# Altium schematic symbol library Controllers-Memory-LIB-SCH.SchLib: 15 symbols
Pins are listed as number, name and electrical type; pins without a type are passive.

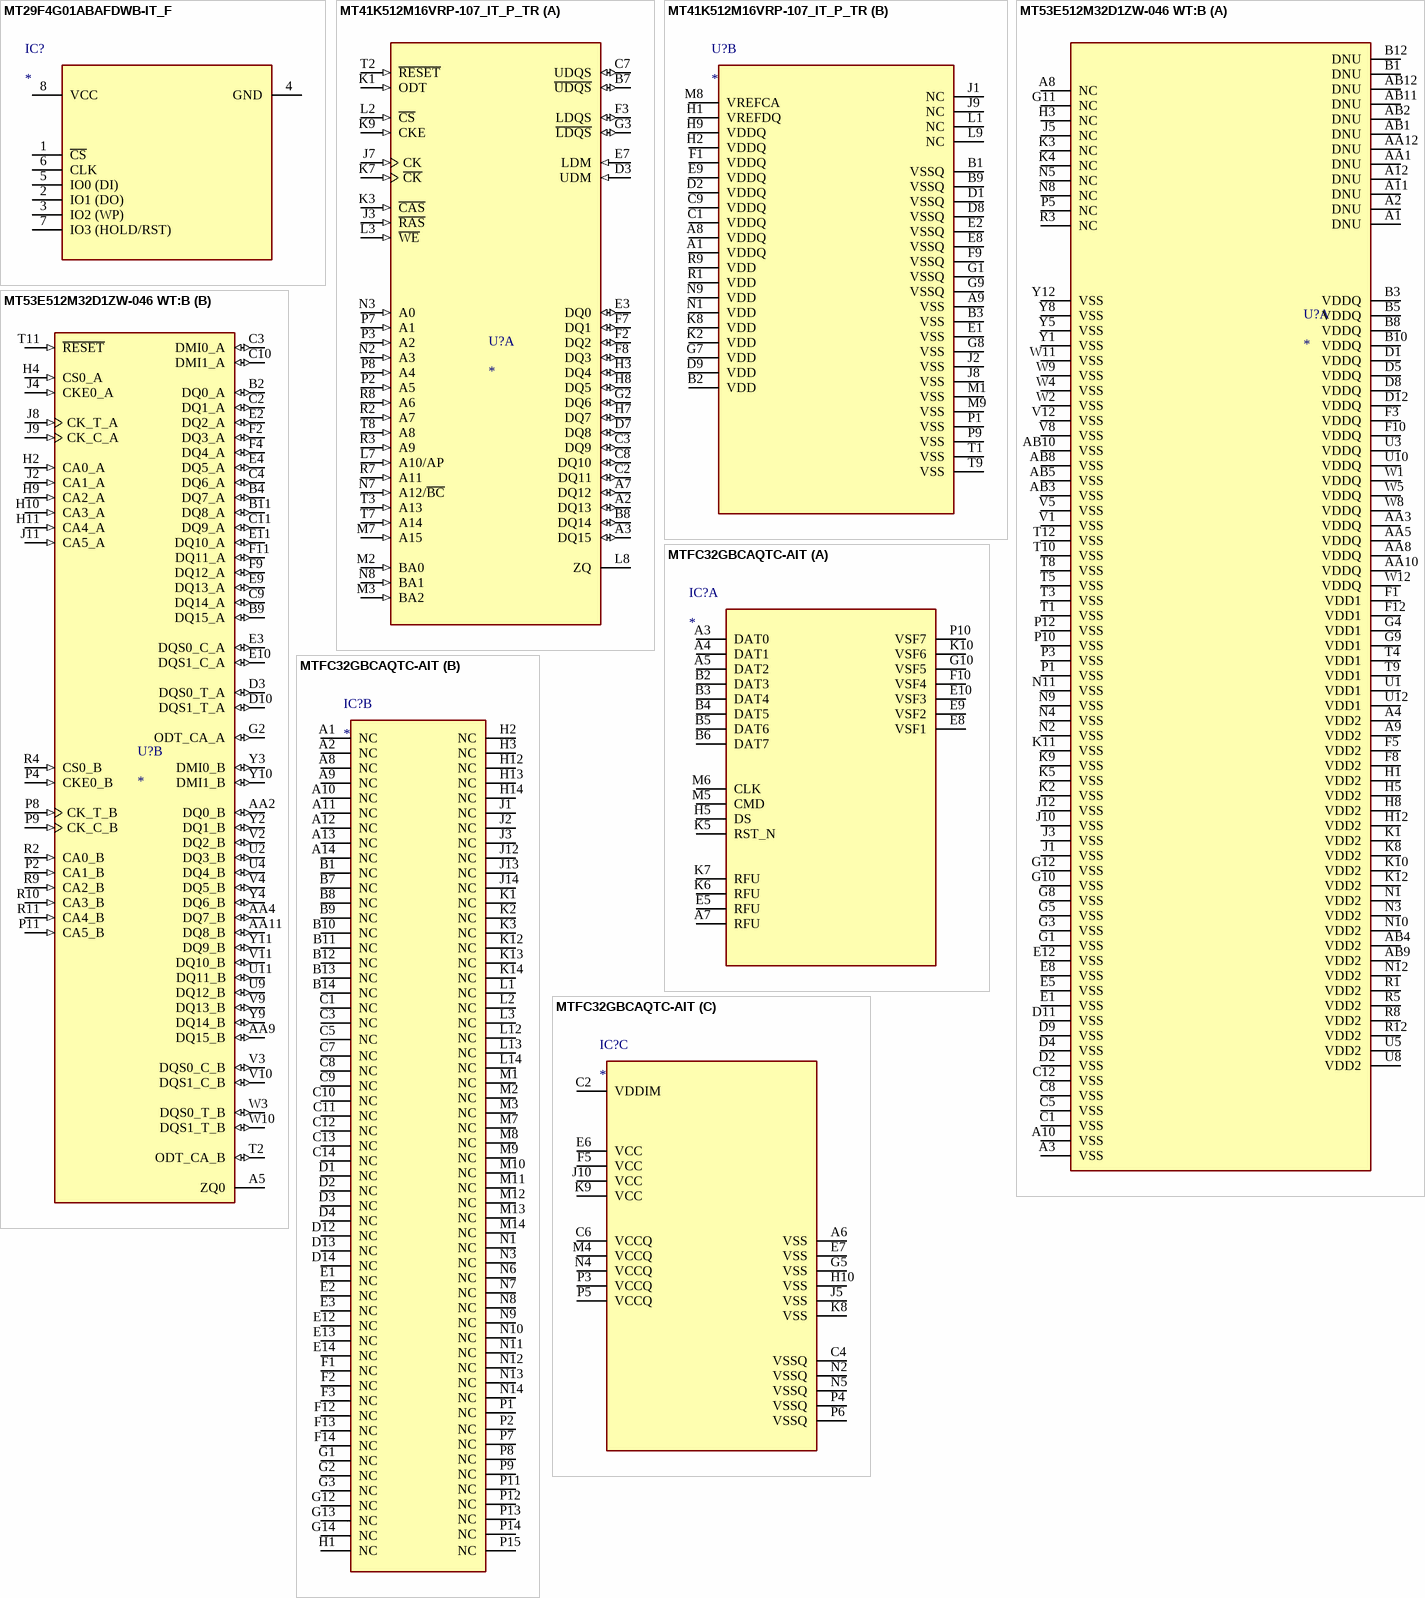
[diagram p0: symbols MT29F4G01ABAFDWB-IT_F to MTFC32GBCAQTC-AIT]

## MT29F4G01ABAFDWB-IT_F
designator IC?
Integrated Circuit; Manufacturer: Micron; Manufacturer Part Number: MT29F4G01ABAFDWB-IT:F; Population Status: YES; Datasheet Link: https://www.farnell.com/datasheets/3151403.pdf; Height: 0.65mm; Supplier Part Number: 340-359563
footprint SON127P800X600X65-8N
pins: 1 ~{CS}, 2 IO1 (DO), 3 IO2 (WP), 4 GND, 5 IO0 (DI), 6 CLK, 7 IO3 (HOLD/RST), 8 VCC

## MT41K512M16VRP-107_IT_P_TR
designator U?
SDRAM - DDR3L Memory IC 8Gbit Parallel 933 MHz 20 ns 96-FBGA (8x14); Manufacturer: Micron Technology; Manufacturer Part Number: MT41K512M16VRP-107 IT:P TR; Population Status: YES; Package: None
footprint BGA96C80P9X16_800X1400X120
part A pins: A2 DQ13 (io), A3 DQ15 (io), A7 DQ12 (io), B7 ~{UDQS} (io), B8 DQ14 (io), C2 DQ11 (io), C3 DQ9 (io), C7 UDQS (io), C8 DQ10 (io), D3 UDM (in), D7 DQ8 (io), E3 DQ0 (io), E7 LDM (in), F2 DQ2 (io), F3 LDQS (io), F7 DQ1 (io), F8 DQ3 (io), G2 DQ6 (io), G3 ~{LDQS} (io), H3 DQ4 (io), H7 DQ7 (io), H8 DQ5 (io), J3 ~{RAS} (in), J7 CK (in), K1 ODT (in), K3 ~{CAS} (in), K7 ~{CK} (in), K9 CKE (in), L2 ~{CS} (in), L3 ~{WE} (in), L7 A10/AP (in), L8 ZQ, M2 BA0 (in), M3 BA2 (in), M7 A15 (in), N2 A3 (in), N3 A0 (in), N7 A12/~{BC} (in), N8 BA1 (in), P2 A5 (in), P3 A2 (in), P7 A1 (in), P8 A4 (in), R2 A7 (in), R3 A9 (in), R7 A11 (in), R8 A6 (in), T2 ~{RESET} (in), T3 A13 (in), T7 A14 (in), T8 A8 (in)
part B pins: A1 VDDQ (power), A8 VDDQ (power), A9 VSS (power), B1 VSSQ (power), B2 VDD (power), B3 VSS (power), B9 VSSQ (power), C1 VDDQ (power), C9 VDDQ (power), D1 VSSQ (power), D2 VDDQ (power), D8 VSSQ (power), D9 VDD (power), E1 VSS (power), E2 VSSQ (power), E8 VSSQ (power), E9 VDDQ (power), F1 VDDQ (power), F9 VSSQ (power), G1 VSSQ (power), G7 VDD (power), G8 VSS (power), G9 VSSQ (power), H1 VREFDQ (power), H2 VDDQ (power), H9 VDDQ (power), J1 NC, J2 VSS (power), J8 VSS (power), J9 NC, K2 VDD (power), K8 VDD (power), L1 NC, L9 NC, M1 VSS (power), M8 VREFCA (power), M9 VSS (power), N1 VDD (power), N9 VDD (power), P1 VSS (power), P9 VSS (power), R1 VDD (power), R9 VDD (power), T1 VSS (power), T9 VSS (power)

## MT53E512M32D1ZW-046 WT:B
designator U?
SDRAM - Mobile LPDDR4 Memory IC 16Gbit Parallel 2.133 GHz 3.5 ns 200-TFBGA (10x14.5); Manufacturer: Micron Technology; Manufacturer Part Number: MT53E512M32D1ZW-046 IT:B; Population Status: YES; Package: None
footprint BGA200C65P12X22_1000X1450X105 (Footprint not found)
part A pins: A1 DNU, A2 DNU, A3 VSS (power), A4 VDD2 (power), A8 NC, A9 VDD2 (power), A10 VSS (power), A11 DNU, A12 DNU, AA1 DNU, AA3 VDDQ (power), AA5 VDDQ (power), AA8 VDDQ (power), AA10 VDDQ (power), AA12 DNU, AB1 DNU, AB2 DNU, AB3 VSS (power), AB4 VDD2 (power), AB5 VSS (power), AB8 VSS (power), AB9 VDD2 (power), AB10 VSS (power), AB11 DNU, AB12 DNU, B1 DNU, B3 VDDQ (power), B5 VDDQ (power), B8 VDDQ (power), B10 VDDQ (power), B12 DNU, C1 VSS (power), C5 VSS (power), C8 VSS (power), C12 VSS (power), D1 VDDQ (power), D2 VSS (power), D4 VSS (power), D5 VDDQ (power), D8 VDDQ (power), D9 VSS (power), D11 VSS (power), D12 VDDQ (power), E1 VSS (power), E5 VSS (power), E8 VSS (power), E12 VSS (power), F1 VDD1 (power), F3 VDDQ (power), F5 VDD2 (power), F8 VDD2 (power), F10 VDDQ (power), F12 VDD1 (power), G1 VSS (power), G3 VSS (power), G4 VDD1 (power), G5 VSS (power), G8 VSS (power), G9 VDD1 (power), G10 VSS (power), G11 NC, G12 VSS (power), H1 VDD2 (power), H3 NC, H5 VDD2 (power), H8 VDD2 (power), H12 VDD2 (power), J1 VSS (power), J3 VSS (power), J5 NC, J10 VSS (power), J12 VSS (power), K1 VDD2 (power), K2 VSS (power), K3 NC, K4 NC, K5 VSS (power), K8 VDD2 (power), K9 VSS (power), K10 VDD2 (power), K11 VSS (power), K12 VDD2 (power), N1 VDD2 (power), N2 VSS (power), N3 VDD2 (power), N4 VSS (power), N5 NC, N8 NC, N9 VSS (power), N10 VDD2 (power), N11 VSS (power), N12 VDD2 (power), P1 VSS (power), P3 VSS (power), P5 NC, P10 VSS (power), P12 VSS (power), R1 VDD2 (power), R3 NC, R5 VDD2 (power), R8 VDD2 (power), R12 VDD2 (power), T1 VSS (power), T3 VSS (power), T4 VDD1 (power), T5 VSS (power), T8 VSS (power), T9 VDD1 (power), T10 VSS (power), T12 VSS (power), U1 VDD1 (power), U3 VDDQ (power), U5 VDD2 (power), U8 VDD2 (power), U10 VDDQ (power), U12 VDD1 (power), V1 VSS (power), V5 VSS (power), V8 VSS (power), V12 VSS (power), W1 VDDQ (power), W2 VSS (power), W4 VSS (power), W5 VDDQ (power), W8 VDDQ (power), W9 VSS (power), W11 VSS (power), W12 VDDQ (power), Y1 VSS (power), Y5 VSS (power), Y8 VSS (power), Y12 VSS (power)
part B pins: A5 ZQ0, AA2 DQ0_B (io), AA4 DQ7_B (io), AA9 DQ15_B (io), AA11 DQ8_B (io), B2 DQ0_A (io), B4 DQ7_A (io), B9 DQ15_A (io), B11 DQ8_A (io), C2 DQ1_A (io), C3 DMI0_A (io), C4 DQ6_A (io), C9 DQ14_A (io), C10 DMI1_A (io), C11 DQ9_A (io), D3 DQS0_T_A (io), D10 DQS1_T_A (io), E2 DQ2_A (io), E3 DQS0_C_A (io), E4 DQ5_A (io), E9 DQ13_A (io), E10 DQS1_C_A (io), E11 DQ10_A (io), F2 DQ3_A (io), F4 DQ4_A (io), F9 DQ12_A (io), F11 DQ11_A (io), G2 ODT_CA_A (io), H2 CA0_A (in), H4 CS0_A (in), H9 CA2_A (in), H10 CA3_A (in), H11 CA4_A (in), J2 CA1_A (in), J4 CKE0_A (in), J8 CK_T_A (in), J9 CK_C_A (in), J11 CA5_A (in), P2 CA1_B (in), P4 CKE0_B (in), P8 CK_T_B (in), P9 CK_C_B (in), P11 CA5_B (in), R2 CA0_B (in), R4 CS0_B (in), R9 CA2_B (in), R10 CA3_B (in), R11 CA4_B (in), T2 ODT_CA_B (io), T11 ~{RESET} (in), U2 DQ3_B (io), U4 DQ4_B (io), U9 DQ12_B (io), U11 DQ11_B (io), V2 DQ2_B (io), V3 DQS0_C_B (io), V4 DQ5_B (io), V9 DQ13_B (io), V10 DQS1_C_B (io), V11 DQ10_B (io), W3 DQS0_T_B (io), W10 DQS1_T_B (io), Y2 DQ1_B (io), Y3 DMI0_B (io), Y4 DQ6_B (io), Y9 DQ14_B (io), Y10 DMI1_B (io), Y11 DQ9_B (io)

## MTFC32GBCAQTC-AIT
designator IC?
Integrated Circuit; Manufacturer: Micron; Manufacturer Part Number: MTFC32GAZAQHD-WT; Population Status: YES; Datasheet Link: https://4donline.ihs.com/images/VipMasterIC/IC/MICT/MICT-S-A0013760855/MICT-S-A0013760855-1.pdf?hkey=52A5661711E402568146F3353EA87419; Height: 0.9mm; Supplier Part Number: 340-531307-TRAY
footprint BGA153C50P14X14_1150X1300X90
part A pins: A3 DAT0, A4 DAT1, A5 DAT2, A7 RFU, B2 DAT3, B3 DAT4, B4 DAT5, B5 DAT6, B6 DAT7, E5 RFU, E8 VSF1, E9 VSF2, E10 VSF3, F10 VSF4, G10 VSF5, H5 DS, K5 RST_N, K6 RFU, K7 RFU, K10 VSF6, M5 CMD, M6 CLK, P10 VSF7
part B pins: A1 NC, A2 NC, A8 NC, A9 NC, A10 NC, A11 NC, A12 NC, A13 NC, A14 NC, B1 NC, B7 NC, B8 NC, B9 NC, B10 NC, B11 NC, B12 NC, B13 NC, B14 NC, C1 NC, C3 NC, C5 NC, C7 NC, C8 NC, C9 NC, C10 NC, C11 NC, C12 NC, C13 NC, C14 NC, D1 NC, D2 NC, D3 NC, D4 NC, D12 NC, D13 NC, D14 NC, E1 NC, E2 NC, E3 NC, E12 NC, E13 NC, E14 NC, F1 NC, F2 NC, F3 NC, F12 NC, F13 NC, F14 NC, G1 NC, G2 NC, G3 NC, G12 NC, G13 NC, G14 NC, H1 NC, H2 NC, H3 NC, H12 NC, H13 NC, H14 NC, J1 NC, J2 NC, J3 NC, J12 NC, J13 NC, J14 NC, K1 NC, K2 NC, K3 NC, K12 NC, K13 NC, K14 NC, L1 NC, L2 NC, L3 NC, L12 NC, L13 NC, L14 NC, M1 NC, M2 NC, M3 NC, M7 NC, M8 NC, M9 NC, M10 NC, M11 NC, M12 NC, M13 NC, M14 NC, N1 NC, N3 NC, N6 NC, N7 NC, N8 NC, N9 NC, N10 NC, N11 NC, N12 NC, N13 NC, N14 NC, P1 NC, P2 NC, P7 NC, P8 NC, P9 NC, P11 NC, P12 NC, P13 NC, P14 NC, P15 NC
part C pins: A6 VSS, C2 VDDIM, C4 VSSQ, C6 VCCQ, E6 VCC, E7 VSS, F5 VCC, G5 VSS, H10 VSS, J5 VSS, J10 VCC, K8 VSS, K9 VCC, M4 VCCQ, N2 VSSQ, N4 VCCQ, N5 VSSQ, P3 VCCQ, P4 VSSQ, P5 VCCQ, P6 VSSQ

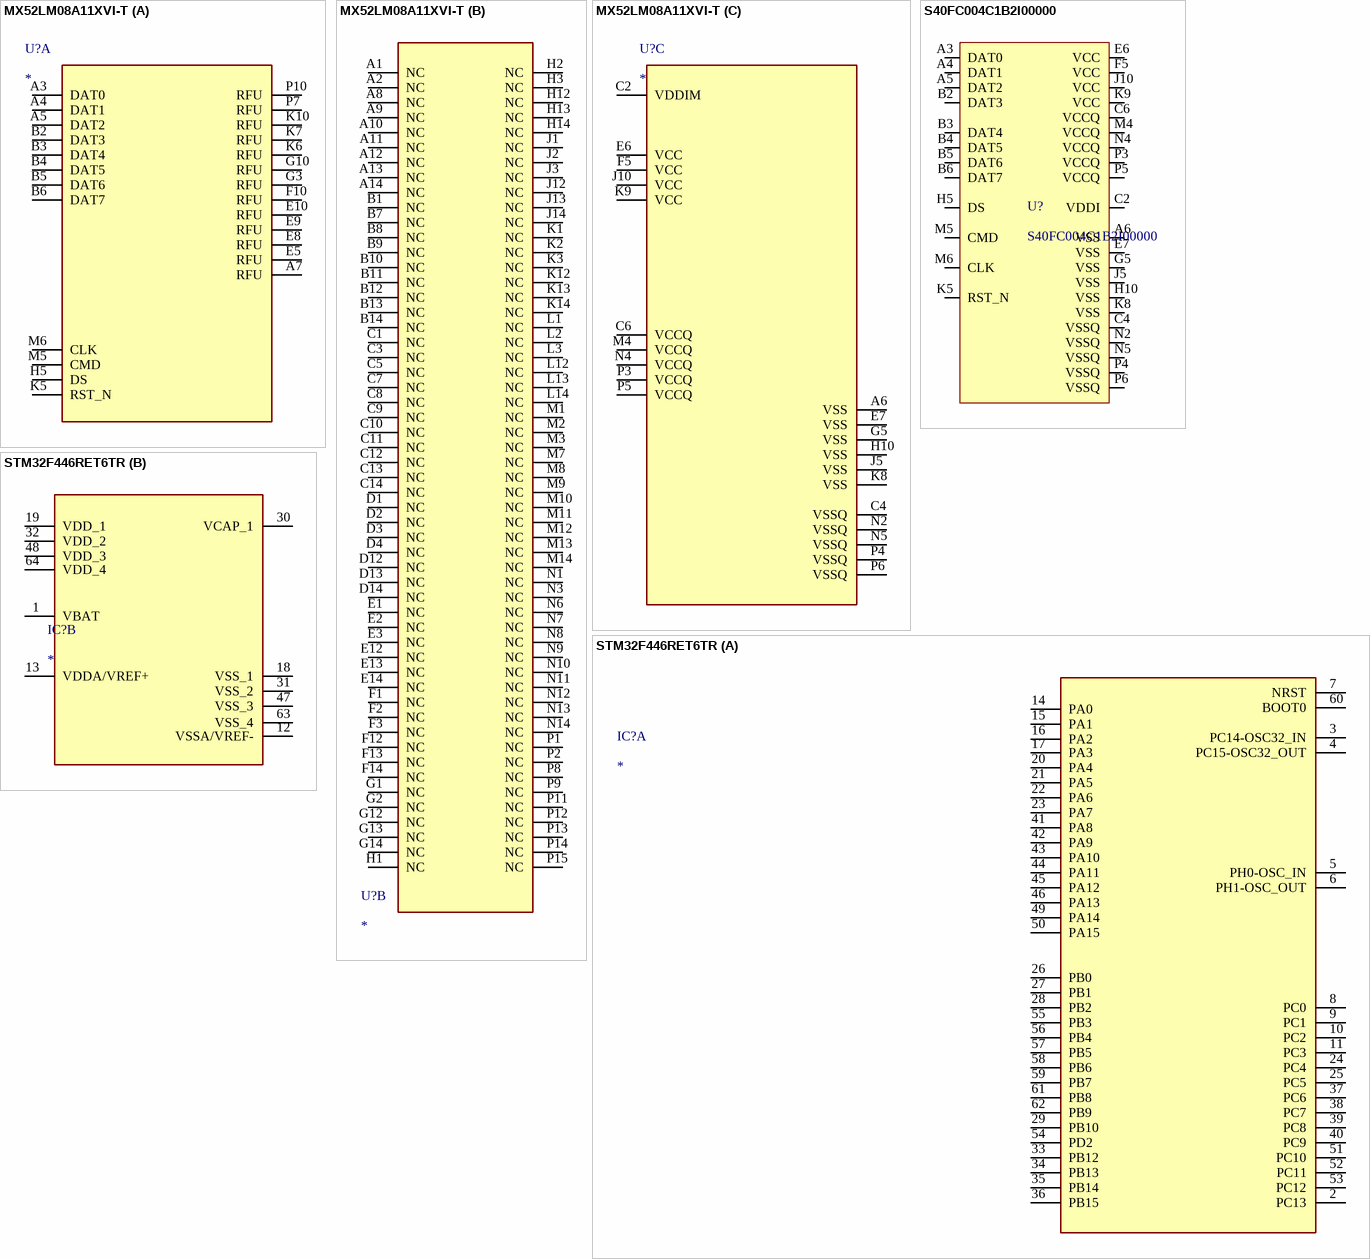
[diagram p1: symbols MX52LM08A11XVI-T to STM32F446RET6TR]

## MX52LM08A11XVI-T
designator U?
FLASH - NAND (MLC) Memory IC 64Gbit eMMC_5.1 200 MHz 153-LFBGA (11.5x13); Manufacturer: Macronix; Manufacturer Part Number: MX52LM08A11XVI-T; Max Current: 200mA; Supply Voltage: 2.7 to 3.6V; Est Price INR: 8,795.26; Population Status: YES; Datasheet Link: https://www.mxic.com.tw/Lists/Datasheet/Attachments/9244/MX52LM04A11_Consumer,%203V,%204GB,%20v1.3.pdf; Height: 0.9mm; Supplier Part Number: 95-52LM08A11XVIT; Package: 153-LFBGA (11.5x13); Supplier: Mouser; Temperature Range: -40 to 85; Weight: 200mg
footprint 153BGA_11p5x13x1_MAC
part A pins: A3 DAT0, A4 DAT1, A5 DAT2, A7 RFU, B2 DAT3, B3 DAT4, B4 DAT5, B5 DAT6, B6 DAT7, E5 RFU, E8 RFU, E9 RFU, E10 RFU, F10 RFU, G3 RFU, G10 RFU, H5 DS, K5 RST_N, K6 RFU, K7 RFU, K10 RFU, M5 CMD, M6 CLK, P7 RFU, P10 RFU
part B pins: A1 NC, A2 NC, A8 NC, A9 NC, A10 NC, A11 NC, A12 NC, A13 NC, A14 NC, B1 NC, B7 NC, B8 NC, B9 NC, B10 NC, B11 NC, B12 NC, B13 NC, B14 NC, C1 NC, C3 NC, C5 NC, C7 NC, C8 NC, C9 NC, C10 NC, C11 NC, C12 NC, C13 NC, C14 NC, D1 NC, D2 NC, D3 NC, D4 NC, D12 NC, D13 NC, D14 NC, E1 NC, E2 NC, E3 NC, E12 NC, E13 NC, E14 NC, F1 NC, F2 NC, F3 NC, F12 NC, F13 NC, F14 NC, G1 NC, G2 NC, G12 NC, G13 NC, G14 NC, H1 NC, H2 NC, H3 NC, H12 NC, H13 NC, H14 NC, J1 NC, J2 NC, J3 NC, J12 NC, J13 NC, J14 NC, K1 NC, K2 NC, K3 NC, K12 NC, K13 NC, K14 NC, L1 NC, L2 NC, L3 NC, L12 NC, L13 NC, L14 NC, M1 NC, M2 NC, M3 NC, M7 NC, M8 NC, M9 NC, M10 NC, M11 NC, M12 NC, M13 NC, M14 NC, N1 NC, N3 NC, N6 NC, N7 NC, N8 NC, N9 NC, N10 NC, N11 NC, N12 NC, N13 NC, N14 NC, P1 NC, P2 NC, P8 NC, P9 NC, P11 NC, P12 NC, P13 NC, P14 NC, P15 NC
part C pins: A6 VSS, C2 VDDIM, C4 VSSQ, C6 VCCQ, E6 VCC, E7 VSS, F5 VCC, G5 VSS, H10 VSS, J5 VSS, J10 VCC, K8 VSS, K9 VCC, M4 VCCQ, N2 VSSQ, N4 VCCQ, N5 VSSQ, P3 VCCQ, P4 VSSQ, P5 VCCQ, P6 VSSQ

## S40FC004C1B2I00000
designator U?
eMMC MLC Memory 4GB 3V3; Manufacturer: SkyHigh Memory; Population Status: YES; Manufacturer Part Number: S40FC004C1B2I00000
footprint VFBGA153-9.0x7.5x0.8 (Footprint not found)
pins: A3 DAT0, A4 DAT1, A5 DAT2, A6 VSS, B2 DAT3, B3 DAT4, B4 DAT5, B5 DAT6, B6 DAT7, C2 VDDI, C4 VSSQ, C6 VCCQ, E6 VCC, E7 VSS, F5 VCC, G5 VSS, H5 DS, H10 VSS, J5 VSS, J10 VCC, K5 RST_N, K8 VSS, K9 VCC, M4 VCCQ, M5 CMD, M6 CLK, N2 VSSQ, N4 VCCQ, N5 VSSQ, P3 VCCQ, P4 VSSQ, P5 VCCQ, P6 VSSQ

## STM32F446RET6TR
designator IC?
Integrated Circuit; Manufacturer: STMicroelectronics; Manufacturer Part Number: STM32F446RET6TR; Population Status: YES; Datasheet Link: https://www.arrow.com/en/products/stm32f446ret6tr/stmicroelectronics; Height: 1.6mm; Supplier Part Number: 511-STM32F446RET6TR
footprint QFP50P1200X1200X160-64N
part A pins: 2 PC13, 3 PC14-OSC32_IN, 4 PC15-OSC32_OUT, 5 PH0-OSC_IN, 6 PH1-OSC_OUT, 7 NRST, 8 PC0, 9 PC1, 10 PC2, 11 PC3, 14 PA0, 15 PA1, 16 PA2, 17 PA3, 20 PA4, 21 PA5, 22 PA6, 23 PA7, 24 PC4, 25 PC5, 26 PB0, 27 PB1, 28 PB2, 29 PB10, 33 PB12, 34 PB13, 35 PB14, 36 PB15, 37 PC6, 38 PC7, 39 PC8, 40 PC9, 41 PA8, 42 PA9, 43 PA10, 44 PA11, 45 PA12, 46 PA13, 49 PA14, 50 PA15, 51 PC10, 52 PC11, 53 PC12, 54 PD2, 55 PB3, 56 PB4, 57 PB5, 58 PB6, 59 PB7, 60 BOOT0, 61 PB8, 62 PB9
part B pins: 1 VBAT, 12 VSSA/VREF-, 13 VDDA/VREF+, 18 VSS_1, 19 VDD_1, 30 VCAP_1, 31 VSS_2, 32 VDD_2, 47 VSS_3, 48 VDD_3, 63 VSS_4, 64 VDD_4

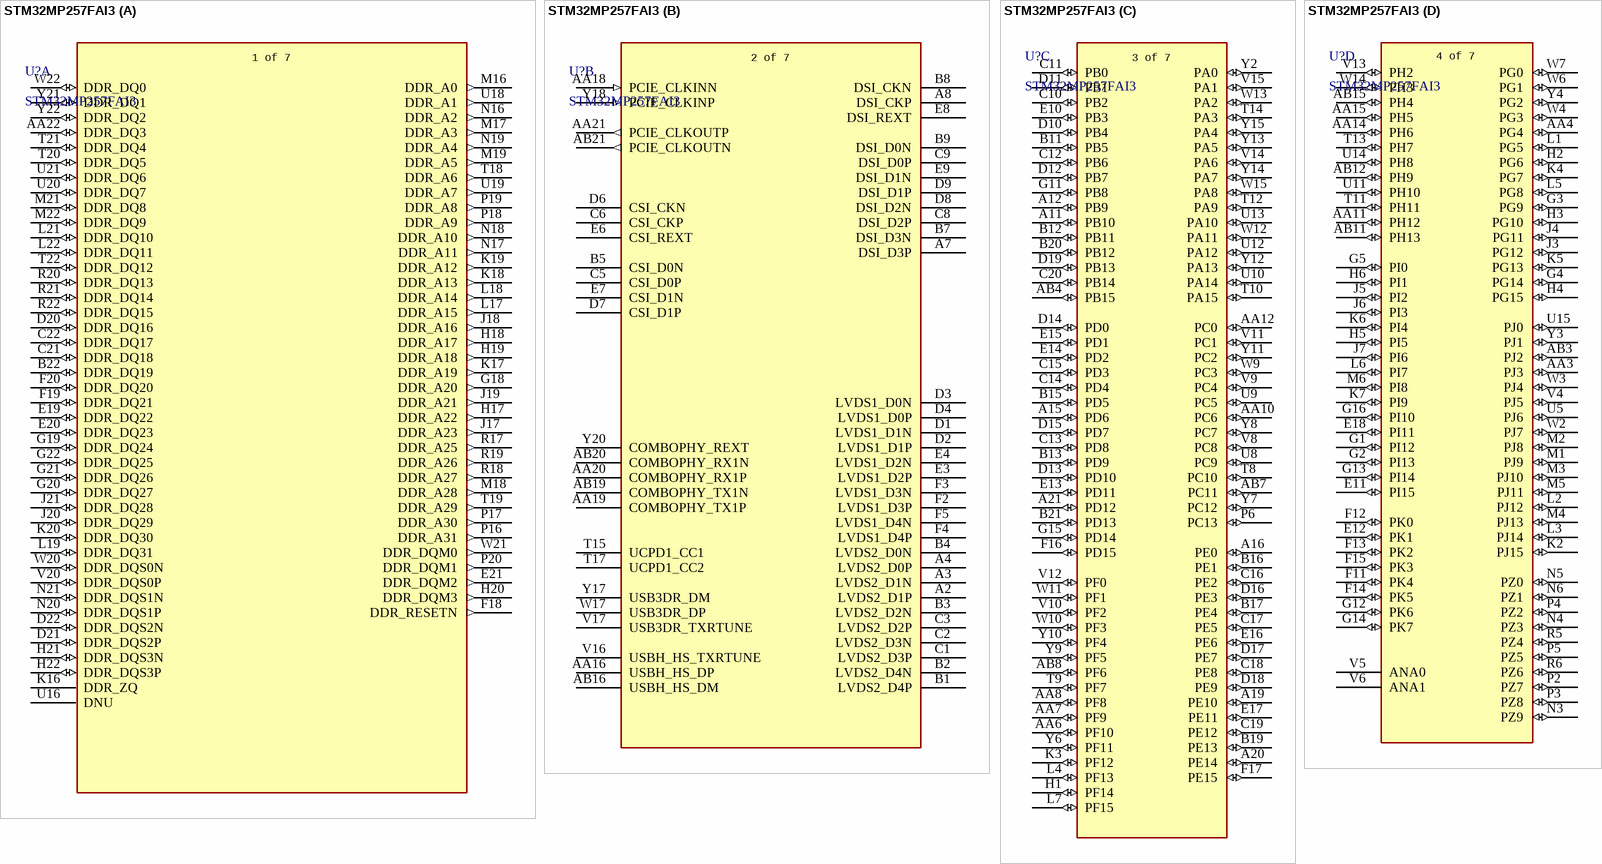
[diagram p2: symbol STM32MP257FAI3]

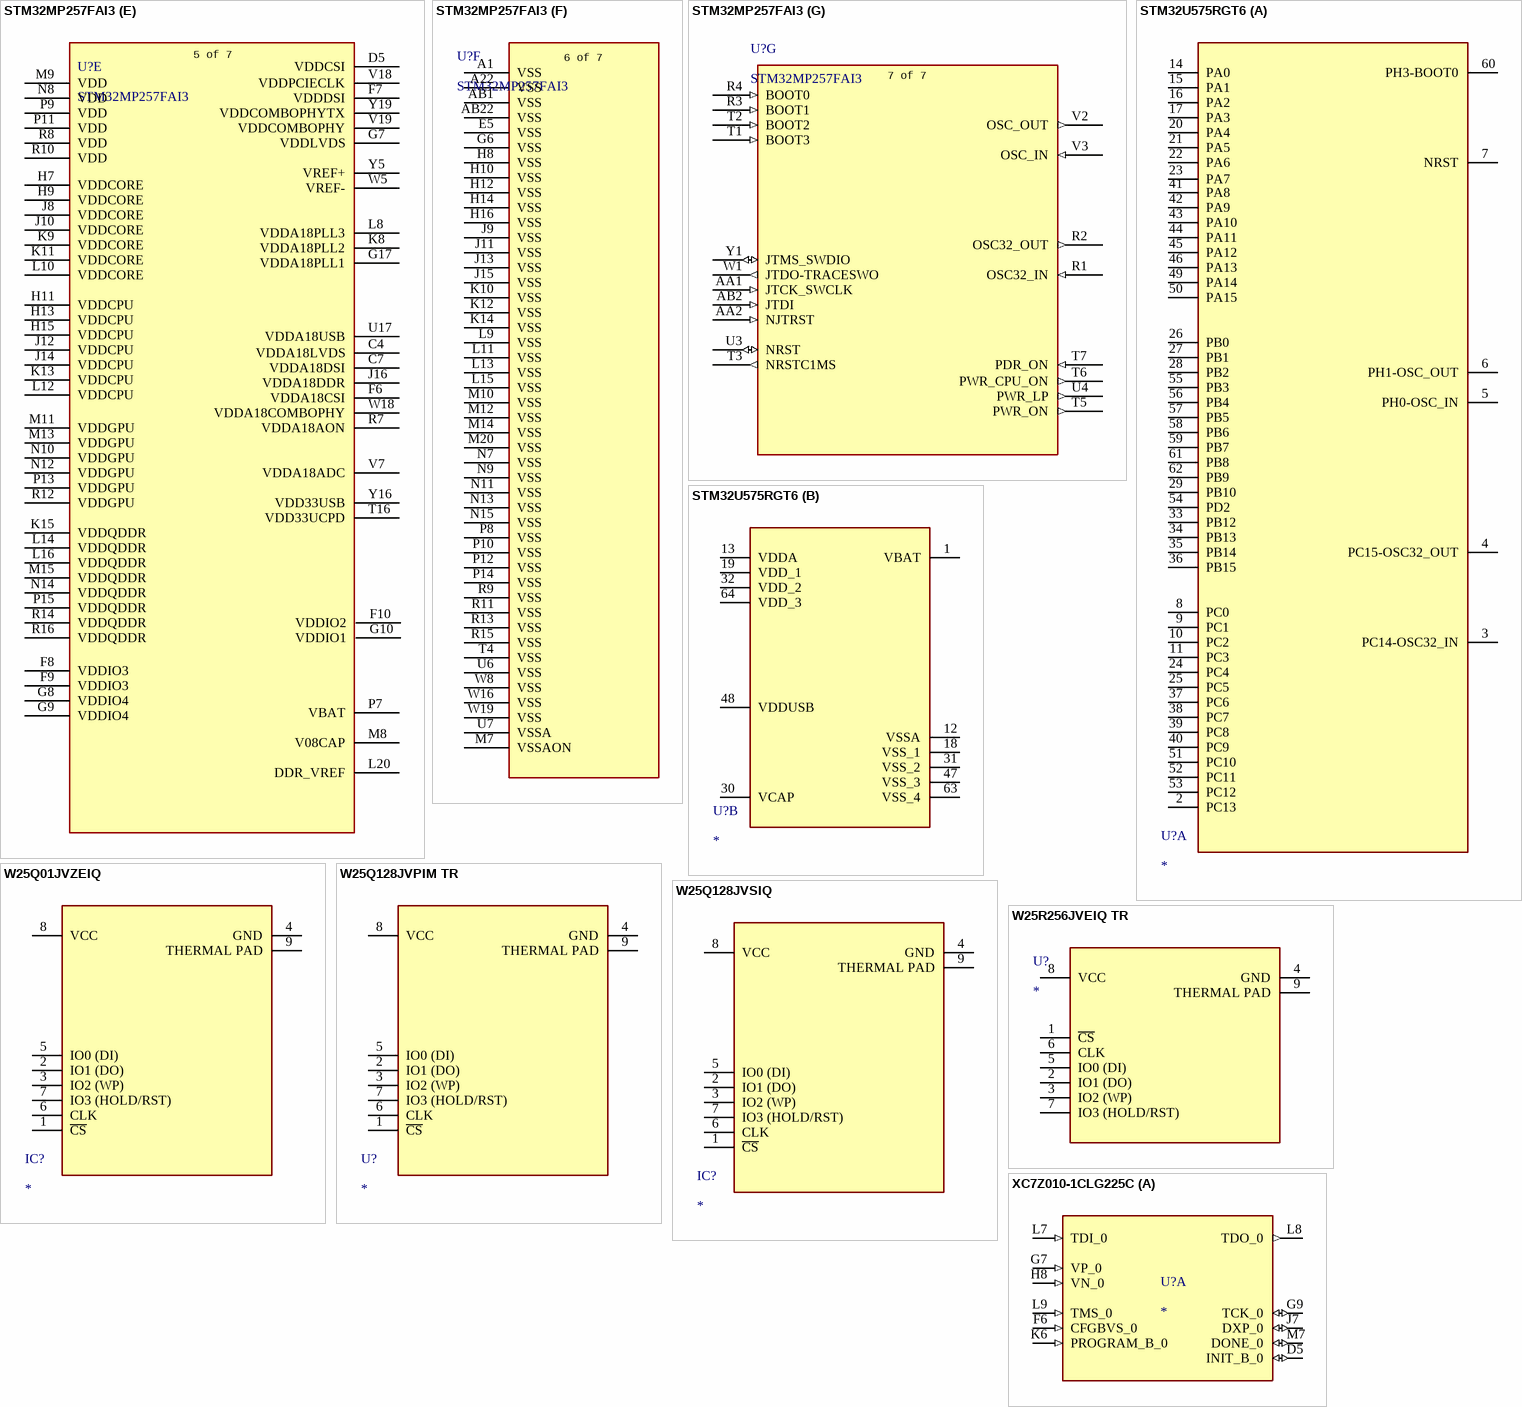
[diagram p3: symbols STM32MP257FAI3 to XC7Z010-1CLG225C]

## STM32MP257FAI3
designator U?
MPU with Dual Arm Cortex-A35 @1.5GHz, Cortex-M33 @400MHz, 3xEthernet (2+1 switch), 3xFD-CAN, LVDS/DSI, H.264, 3D GPU, AI/NN, Secure Boot, Cryptography, DRAM enc/dec, PKA; Manufacturer: STMicroelectronics; Population Status: YES; Manufacturer Part Number: STM32MP257FAI3
footprint TFBGA436_STM
part A pins: AA22 DDR_DQ3 (io), B22 DDR_DQ19 (io), C21 DDR_DQ18 (io), C22 DDR_DQ17 (io), D20 DDR_DQ16 (io), D21 DDR_DQS2P (io), D22 DDR_DQS2N (io), E19 DDR_DQ22 (io), E20 DDR_DQ23 (io), E21 DDR_DQM2 (out), F18 DDR_RESETN (out), F19 DDR_DQ21 (io), F20 DDR_DQ20 (io), G18 DDR_A20 (out), G19 DDR_DQ24 (io), G20 DDR_DQ27 (io), G21 DDR_DQ26 (io), G22 DDR_DQ25 (io), H17 DDR_A22 (out), H18 DDR_A17 (out), H19 DDR_A18 (out), H20 DDR_DQM3 (out), H21 DDR_DQS3N (io), H22 DDR_DQS3P (io), J17 DDR_A23 (out), J18 DDR_A16 (out), J19 DDR_A21 (out), J20 DDR_DQ29 (io), J21 DDR_DQ28 (io), K16 DDR_ZQ, K17 DDR_A19 (out), K18 DDR_A13 (out), K19 DDR_A12 (out), K20 DDR_DQ30 (io), L17 DDR_A15 (out), L18 DDR_A14 (out), L19 DDR_DQ31 (io), L21 DDR_DQ10 (io), L22 DDR_DQ11 (io), M16 DDR_A0 (out), M17 DDR_A3 (out), M18 DDR_A28 (out), M19 DDR_A5 (out), M21 DDR_DQ8 (io), M22 DDR_DQ9 (io), N16 DDR_A2 (out), N17 DDR_A11 (out), N18 DDR_A10 (out), N19 DDR_A4 (out), N20 DDR_DQS1P (io), N21 DDR_DQS1N (io), P16 DDR_A31 (out), P17 DDR_A30 (out), P18 DDR_A9 (out), P19 DDR_A8 (out), P20 DDR_DQM1 (out), R17 DDR_A25 (out), R18 DDR_A27 (out), R19 DDR_A26 (out), R20 DDR_DQ13 (io), R21 DDR_DQ14 (io), R22 DDR_DQ15 (io), T18 DDR_A6 (out), T19 DDR_A29 (out), T20 DDR_DQ5 (io), T21 DDR_DQ4 (io), T22 DDR_DQ12 (io), U16 DNU, U18 DDR_A1 (out), U19 DDR_A7 (out), U20 DDR_DQ7 (io), U21 DDR_DQ6 (io), V20 DDR_DQS0P (io), W20 DDR_DQS0N (io), W21 DDR_DQM0 (out), W22 DDR_DQ0 (io), Y21 DDR_DQ1 (io), Y22 DDR_DQ2 (io)
part B pins: A2 LVDS2_D1P, A3 LVDS2_D1N, A4 LVDS2_D0P, A7 DSI_D3P, A8 DSI_CKP, AA16 USBH_HS_DP, AA18 PCIE_CLKINN (in), AA19 COMBOPHY_TX1P, AA20 COMBOPHY_RX1P, AA21 PCIE_CLKOUTP (out), AB16 USBH_HS_DM, AB19 COMBOPHY_TX1N, AB20 COMBOPHY_RX1N, AB21 PCIE_CLKOUTN (out), B1 LVDS2_D4P, B2 LVDS2_D4N, B3 LVDS2_D2N, B4 LVDS2_D0N, B5 CSI_D0N, B7 DSI_D3N, B8 DSI_CKN, B9 DSI_D0N, C1 LVDS2_D3P, C2 LVDS2_D3N, C3 LVDS2_D2P, C5 CSI_D0P, C6 CSI_CKP, C8 DSI_D2P, C9 DSI_D0P, D1 LVDS1_D1N, D2 LVDS1_D1P, D3 LVDS1_D0N, D4 LVDS1_D0P, D6 CSI_CKN, D7 CSI_D1P, D8 DSI_D2N, D9 DSI_D1P, E3 LVDS1_D2P, E4 LVDS1_D2N, E6 CSI_REXT, E7 CSI_D1N, E8 DSI_REXT, E9 DSI_D1N, F2 LVDS1_D3P, F3 LVDS1_D3N, F4 LVDS1_D4P, F5 LVDS1_D4N, T15 UCPD1_CC1, T17 UCPD1_CC2, V16 USBH_HS_TXRTUNE, V17 USB3DR_TXRTUNE, W17 USB3DR_DP, Y17 USB3DR_DM, Y18 PCIE_CLKINP (in), Y20 COMBOPHY_REXT
part C pins: A11 PB10 (io), A12 PB9 (io), A15 PD6 (io), A16 PE0 (io), A19 PE10 (io), A20 PE14 (io), A21 PD12 (io), AA6 PF10 (io), AA7 PF9 (io), AA8 PF8 (io), AA10 PC6 (io), AA12 PC0 (io), AB4 PB15 (io), AB7 PC11 (io), AB8 PF6 (io), B11 PB5 (io), B12 PB11 (io), B13 PD9 (io), B15 PD5 (io), B16 PE1 (io), B17 PE4 (io), B19 PE13 (io), B20 PB12 (io), B21 PD13 (io), C10 PB2 (io), C11 PB0 (io), C12 PB6 (io), C13 PD8 (io), C14 PD4 (io), C15 PD3 (io), C16 PE2 (io), C17 PE5 (io), C18 PE8 (io), C19 PE12 (io), C20 PB14 (io), D10 PB4 (io), D11 PB1 (io), D12 PB7 (io), D13 PD10 (io), D14 PD0 (io), D15 PD7 (io), D16 PE3 (io), D17 PE7 (io), D18 PE9 (io), D19 PB13 (io), E10 PB3 (io), E13 PD11 (io), E14 PD2 (io), E15 PD1 (io), E16 PE6 (io), E17 PE11 (io), F16 PD15 (io), F17 PE15 (io), G11 PB8 (io), G15 PD14 (io), H1 PF14 (io), K3 PF12 (io), L4 PF13 (io), L7 PF15 (io), P6 PC13 (io), T8 PC10 (io), T9 PF7 (io), T10 PA15 (io), T12 PA9 (io), T14 PA3 (io), U8 PC9 (io), U9 PC5 (io), U10 PA14 (io), U12 PA12 (io), U13 PA10 (io), V8 PC8 (io), V9 PC4 (io), V10 PF2 (io), V11 PC1 (io), V12 PF0 (io), V14 PA6 (io), V15 PA1 (io), W9 PC3 (io), W10 PF3 (io), W11 PF1 (io), W12 PA11 (io), W13 PA2 (io), W15 PA8 (io), Y2 PA0 (io), Y6 PF11 (io), Y7 PC12 (io), Y8 PC7 (io), Y9 PF5 (io), Y10 PF4 (io), Y11 PC2 (io), Y12 PA13 (io), Y13 PA5 (io), Y14 PA7 (io), Y15 PA4 (io)
part D pins: AA3 PJ3 (io), AA4 PG4 (io), AA11 PH12 (io), AA14 PH6 (io), AA15 PH5 (io), AB3 PJ2 (io), AB11 PH13 (io), AB12 PH9 (io), AB15 PH4 (io), E11 PI15 (io), E12 PK1 (io), E18 PI11 (io), F11 PK4 (io), F12 PK0 (io), F13 PK2 (io), F14 PK5 (io), F15 PK3 (io), G1 PI12 (io), G2 PI13 (io), G3 PG9 (io), G4 PG14 (io), G5 PI0 (io), G12 PK6 (io), G13 PI14 (io), G14 PK7 (io), G16 PI10 (io), H2 PG6 (io), H3 PG10 (io), H4 PG15 (io), H5 PI5 (io), H6 PI1 (io), J3 PG12 (io), J4 PG11 (io), J5 PI2 (io), J6 PI3 (io), J7 PI6 (io), K2 PJ15 (io), K4 PG7 (io), K5 PG13 (io), K6 PI4 (io), K7 PI9 (io), L1 PG5 (io), L2 PJ12 (io), L3 PJ14 (io), L5 PG8 (io), L6 PI7 (io), M1 PJ9 (io), M2 PJ8 (io), M3 PJ10 (io), M4 PJ13 (io), M5 PJ11 (io), M6 PI8 (io), N3 PZ9 (io), N4 PZ3 (io), N5 PZ0 (io), N6 PZ1 (io), P2 PZ7 (io), P3 PZ8 (io), P4 PZ2 (io), P5 PZ5 (io), R5 PZ4 (io), R6 PZ6 (io), T11 PH11 (io), T13 PH7 (io), U5 PJ6 (io), U11 PH10 (io), U14 PH8 (io), U15 PJ0 (io), V4 PJ5 (io), V5 ANA0, V6 ANA1, V13 PH2 (io), W2 PJ7 (io), W3 PJ4 (io), W4 PG3 (io), W6 PG1 (io), W7 PG0 (io), W14 PH3 (io), Y3 PJ1 (io), Y4 PG2 (io)
part E pins: C4 VDDA18LVDS (power), C7 VDDA18DSI (power), D5 VDDCSI (power), F6 VDDA18CSI (power), F7 VDDDSI (power), F8 VDDIO3 (power), F9 VDDIO3 (power), F10 VDDIO2 (power), G7 VDDLVDS (power), G8 VDDIO4 (power), G9 VDDIO4 (power), G10 VDDIO1 (power), G17 VDDA18PLL1 (power), H7 VDDCORE (power), H9 VDDCORE (power), H11 VDDCPU (power), H13 VDDCPU (power), H15 VDDCPU (power), J8 VDDCORE (power), J10 VDDCORE (power), J12 VDDCPU (power), J14 VDDCPU (power), J16 VDDA18DDR (power), K8 VDDA18PLL2 (power), K9 VDDCORE (power), K11 VDDCORE (power), K13 VDDCPU (power), K15 VDDQDDR (power), L8 VDDA18PLL3 (power), L10 VDDCORE (power), L12 VDDCPU (power), L14 VDDQDDR (power), L16 VDDQDDR (power), L20 DDR_VREF (power), M8 V08CAP (power), M9 VDD (power), M11 VDDGPU (power), M13 VDDGPU (power), M15 VDDQDDR (power), N8 VDD (power), N10 VDDGPU (power), N12 VDDGPU (power), N14 VDDQDDR (power), P7 VBAT (power), P9 VDD (power), P11 VDD (power), P13 VDDGPU (power), P15 VDDQDDR (power), R7 VDDA18AON (power), R8 VDD (power), R10 VDD (power), R12 VDDGPU, R14 VDDQDDR (power), R16 VDDQDDR (power), T16 VDD33UCPD (power), U17 VDDA18USB (power), V7 VDDA18ADC (power), V18 VDDPCIECLK, V19 VDDCOMBOPHY (power), W5 VREF- (power), W18 VDDA18COMBOPHY (power), Y5 VREF+ (power), Y16 VDD33USB (power), Y19 VDDCOMBOPHYTX (power)
part F pins: A1 VSS (power), A22 VSS (power), AB1 VSS (power), AB22 VSS (power), E5 VSS (power), G6 VSS (power), H8 VSS (power), H10 VSS (power), H12 VSS (power), H14 VSS (power), H16 VSS (power), J9 VSS (power), J11 VSS (power), J13 VSS (power), J15 VSS (power), K10 VSS (power), K12 VSS (power), K14 VSS (power), L9 VSS (power), L11 VSS (power), L13 VSS (power), L15 VSS (power), M7 VSSAON (power), M10 VSS (power), M12 VSS (power), M14 VSS (power), M20 VSS (power), N7 VSS (power), N9 VSS (power), N11 VSS (power), N13 VSS (power), N15 VSS (power), P8 VSS (power), P10 VSS (power), P12 VSS (power), P14 VSS (power), R9 VSS (power), R11 VSS (power), R13 VSS (power), R15 VSS (power), T4 VSS (power), U6 VSS (power), U7 VSSA (power), W8 VSS (power), W16 VSS (power), W19 VSS (power)
part G pins: AA1 JTCK_SWCLK (in), AA2 NJTRST (in), AB2 JTDI (in), R1 OSC32_IN (in), R2 OSC32_OUT (out), R3 BOOT1 (in), R4 BOOT0 (in), T1 BOOT3 (in), T2 BOOT2 (in), T3 NRSTC1MS (out), T5 PWR_ON (out), T6 PWR_CPU_ON (out), T7 PDR_ON (in), U3 NRST (io), U4 PWR_LP (out), V2 OSC_OUT (out), V3 OSC_IN (in), W1 JTDO-TRACESWO (out), Y1 JTMS_SWDIO (io)
part A text: 1 of 7
part B text: 2 of 7
part C text: 3 of 7
part D text: 4 of 7
part E text: 5 of 7
part F text: 6 of 7
part G text: 7 of 7

## STM32U575RGT6
designator U?
ARM® Cortex®-M33 STM32U5 Microcontroller IC 32-Bit 160MHz 1MB (1M x 8) FLASH 64-LQFP (10x10); Manufacturer: STMicroelectronics; Manufacturer Part Number: STM32U575RGT6; Max Current: 150mA; Supply Voltage: 1.71 to 3.6V; Est Price INR: 920.62; Population Status: YES; Datasheet Link: https://www.st.com/resource/en/datasheet/stm32u575ag.pdf; Height: 1.6mm; Supplier Part Number: 511-STM32U575RGT6; Package: 64-LQFP; Supplier: Mouser; Temperature Range: -40 to 85
footprint QFP50P1200X1200X160-64N
part A pins: 2 PC13, 3 PC14-OSC32_IN, 4 PC15-OSC32_OUT, 5 PH0-OSC_IN, 6 PH1-OSC_OUT, 7 NRST, 8 PC0, 9 PC1, 10 PC2, 11 PC3, 14 PA0, 15 PA1, 16 PA2, 17 PA3, 20 PA4, 21 PA5, 22 PA6, 23 PA7, 24 PC4, 25 PC5, 26 PB0, 27 PB1, 28 PB2, 29 PB10, 33 PB12, 34 PB13, 35 PB14, 36 PB15, 37 PC6, 38 PC7, 39 PC8, 40 PC9, 41 PA8, 42 PA9, 43 PA10, 44 PA11, 45 PA12, 46 PA13, 49 PA14, 50 PA15, 51 PC10, 52 PC11, 53 PC12, 54 PD2, 55 PB3, 56 PB4, 57 PB5, 58 PB6, 59 PB7, 60 PH3-BOOT0, 61 PB8, 62 PB9
part B pins: 1 VBAT, 12 VSSA, 13 VDDA, 18 VSS_1, 19 VDD_1, 30 VCAP, 31 VSS_2, 32 VDD_2, 47 VSS_3, 48 VDDUSB, 63 VSS_4, 64 VDD_3

## W25Q01JVZEIQ
designator IC?
Integrated Circuit; Manufacturer: Winbond; Manufacturer Part Number: W25Q01JVZEIQ; Max Current: 100mA; Supply Voltage: 3.3V; Est Price INR: 2714.33; Population Status: YES; Datasheet Link: https://www.winbond.com/hq/search-resource-file.jsp?partNo=W25Q01JVZEIQ&type=datasheet; Height: 0.8mm; Supplier Part Number: 454-W25Q01JVZEIQ; Package: WSON-8; Supplier: Mouser; Temperature Range: -40 to 85; Weight: 2.658g
footprint SON127P800X600X80-9N-D
pins: 1 ~{CS}, 2 IO1 (DO), 3 IO2 (WP), 4 GND, 5 IO0 (DI), 6 CLK, 7 IO3 (HOLD/RST), 8 VCC, 9 THERMAL PAD

## W25Q128JVPIM TR
designator U?
NOR Flash spiFlash 128M-bit, 4Kb Uniform Sector, DTR; Manufacturer Part Number: W25Q128JVPIM TR; Manufacturer: Winbond; Est Price INR: 616.23; Max Current: 100mA; Population Status: YES; Supply Voltage: 3 to 3.6V; Description: NOR Flash spiFlash; Datasheet Link: https://ms.componentsearchengine.com/Datasheets/1/W25Q128JVPIM TR.pdf; Height: 0.8mm; Package: WSON-8; Supplier Part Number: 454-W25Q128JVPIMTR; Supplier: Mouser; Temperature Range: -40 to 85; Weight: 94 mg
footprint SON127P600X500X80-9N-D (Footprint not found)
pins: 1 ~{CS}, 2 IO1 (DO), 3 IO2 (WP), 4 GND, 5 IO0 (DI), 6 CLK, 7 IO3 (HOLD/RST), 8 VCC, 9 THERMAL PAD

## W25Q128JVSIQ
designator IC?
Integrated Circuit; Manufacturer: Winbond; Manufacturer Part Number: W25Q128JVSIQ; Population Status: YES; Datasheet Link: https://www.winbond.com/hq/search-resource-file.jsp?partNo=W25Q128JVSIQ&type=datasheet; Height: 2.16mm; Supplier Part Number: 454-W25Q128JVSIQ
footprint SOIC127P790X216-8N
pins: 1 ~{CS}, 2 IO1 (DO), 3 IO2 (WP), 4 GND, 5 IO0 (DI), 6 CLK, 7 IO3 (HOLD/RST), 8 VCC, 9 THERMAL PAD

## W25R256JVEIQ TR
designator U?
NOR Flash RPMC spiFlash, 3V, 256M-bit; Manufacturer: Winbond; Manufacturer Part Number: W25R256JVEIQ TR; Max Current: 45mA; Supply Voltage: 3.3V; Est Price INR: 874.03; Population Status: YES; Datasheet Link: https://www.winbond.com/resource-files/W25R256JV%20RevD%2006162020.pdf; Height: 0.8mm; Supplier Part Number: 454-W25R256JVEIQTR; Package: WSON-8; Supplier: Mouser; Temperature Range: -40 to 85; Weight: 2.658g
footprint FP-W25R256JVEIQ_TR-MFG
pins: 1 ~{CS}, 2 IO1 (DO), 3 IO2 (WP), 4 GND, 5 IO0 (DI), 6 CLK, 7 IO3 (HOLD/RST), 8 VCC, 9 THERMAL PAD

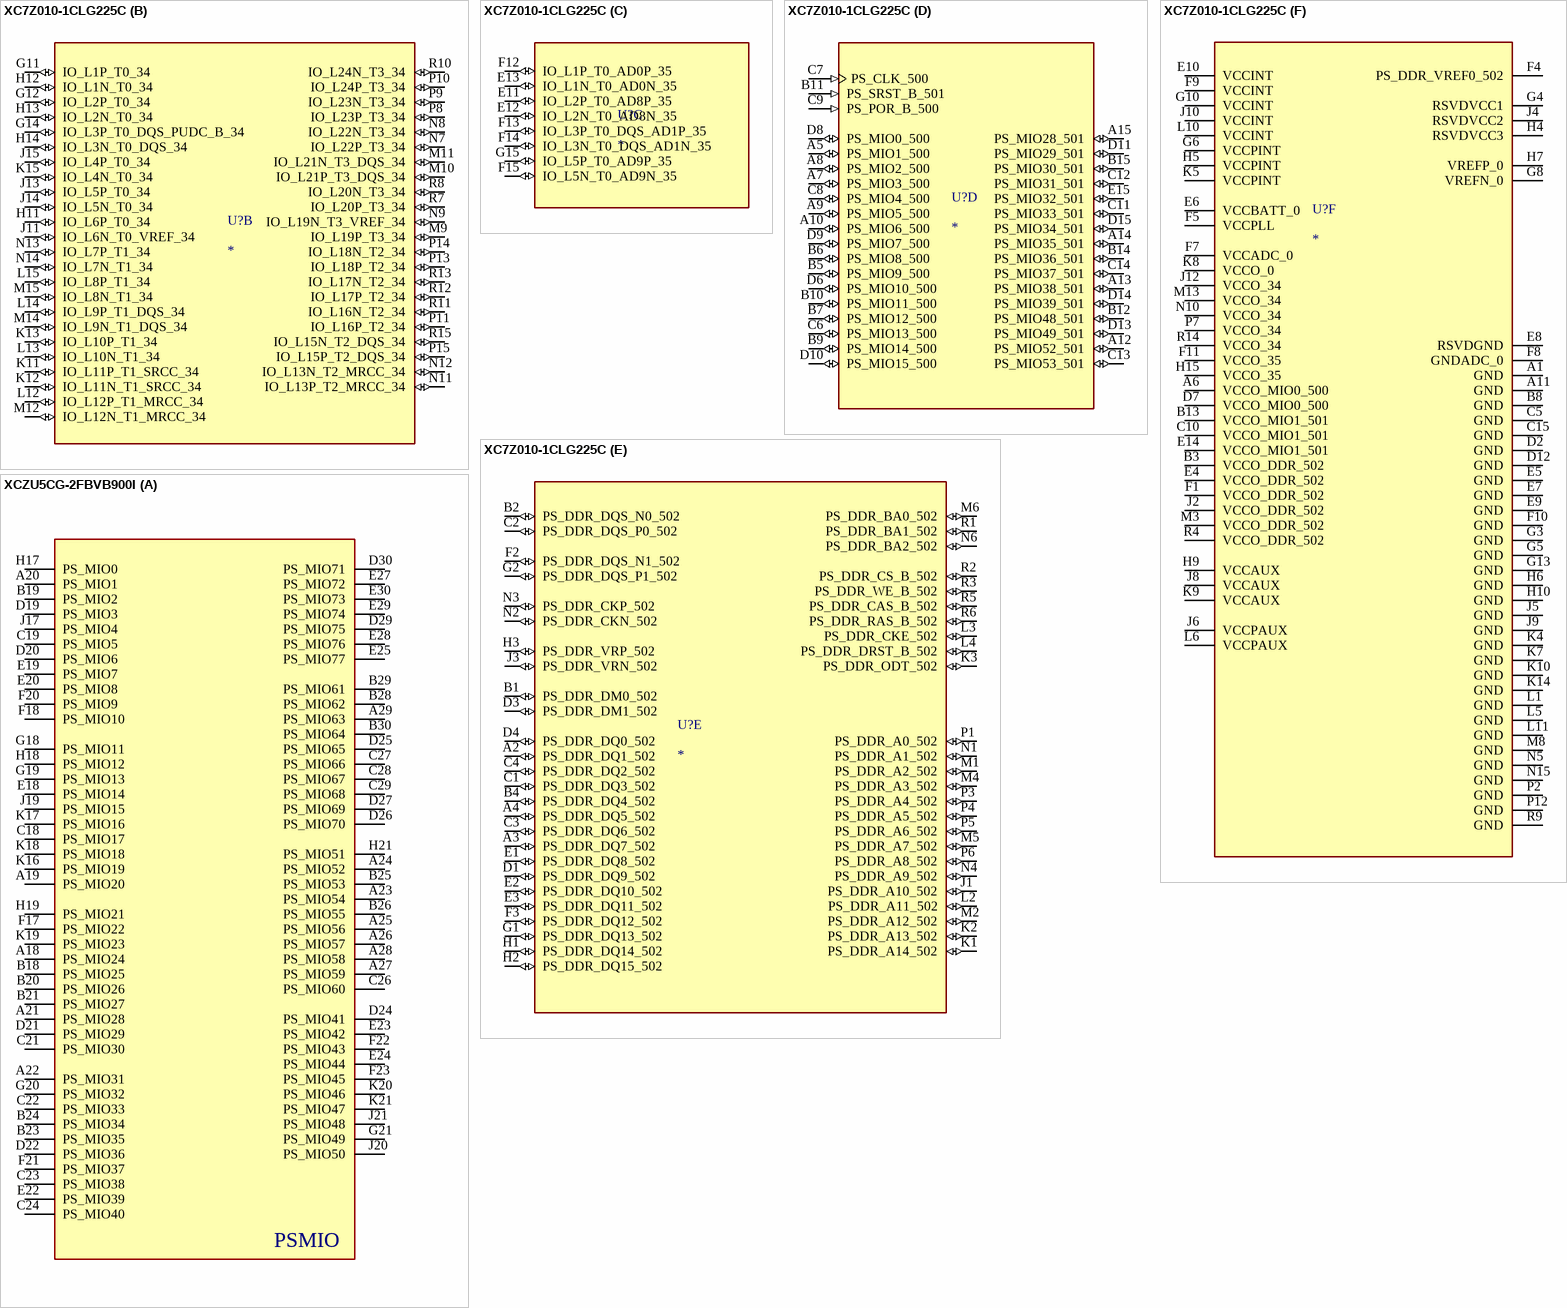
[diagram p4: symbols XC7Z010-1CLG225C to XCZU5CG-2FBVB900I]

## XC7Z010-1CLG225C
designator U?
Dual ARMÂ® CortexÂ®-A9 MPCoreâ„¢ with CoreSightâ„¢ System On Chip (SOC) IC ZynqÂ®-7000 Artixâ„¢-7 FPGA, 28K Logic Cells 667MHz 225-CSPBGA (13x13); Manufacturer: Xilinx Inc.; Manufacturer Part Number: XC7Z010-1CLG225C; Population Status: YES; Package: CSPBGA-225 Xilinx
footprint BGA225C80P15X15_1300X1300X150
part A pins: D5 INIT_B_0 (io), F6 CFGBVS_0 (in), G7 VP_0 (in), G9 TCK_0 (io), H8 VN_0 (in), J7 DXP_0 (io), K6 PROGRAM_B_0 (in), L7 TDI_0 (in), L8 TDO_0 (out), L9 TMS_0 (in), M7 DONE_0 (io)
part B pins: G11 IO_L1P_T0_34 (io), G12 IO_L2P_T0_34 (io), G14 IO_L3P_T0_DQS_PUDC_B_34 (io), H11 IO_L6P_T0_34 (io), H12 IO_L1N_T0_34 (io), H13 IO_L2N_T0_34 (io), H14 IO_L3N_T0_DQS_34 (io), J11 IO_L6N_T0_VREF_34 (io), J13 IO_L5P_T0_34 (io), J14 IO_L5N_T0_34 (io), J15 IO_L4P_T0_34 (io), K11 IO_L11P_T1_SRCC_34 (io), K12 IO_L11N_T1_SRCC_34 (io), K13 IO_L10P_T1_34 (io), K15 IO_L4N_T0_34 (io), L12 IO_L12P_T1_MRCC_34 (io), L13 IO_L10N_T1_34 (io), L14 IO_L9P_T1_DQS_34 (io), L15 IO_L8P_T1_34 (io), M9 IO_L19P_T3_34 (io), M10 IO_L21P_T3_DQS_34 (io), M11 IO_L21N_T3_DQS_34 (io), M12 IO_L12N_T1_MRCC_34 (io), M14 IO_L9N_T1_DQS_34 (io), M15 IO_L8N_T1_34 (io), N7 IO_L22P_T3_34 (io), N8 IO_L22N_T3_34 (io), N9 IO_L19N_T3_VREF_34 (io), N11 IO_L13P_T2_MRCC_34 (io), N12 IO_L13N_T2_MRCC_34 (io), N13 IO_L7P_T1_34 (io), N14 IO_L7N_T1_34 (io), P8 IO_L23P_T3_34 (io), P9 IO_L23N_T3_34 (io), P10 IO_L24P_T3_34 (io), P11 IO_L16P_T2_34 (io), P13 IO_L18P_T2_34 (io), P14 IO_L18N_T2_34 (io), P15 IO_L15P_T2_DQS_34 (io), R7 IO_L20P_T3_34 (io), R8 IO_L20N_T3_34 (io), R10 IO_L24N_T3_34 (io), R11 IO_L16N_T2_34 (io), R12 IO_L17P_T2_34 (io), R13 IO_L17N_T2_34 (io), R15 IO_L15N_T2_DQS_34 (io)
part C pins: E11 IO_L2P_T0_AD8P_35 (io), E12 IO_L2N_T0_AD8N_35 (io), E13 IO_L1N_T0_AD0N_35 (io), F12 IO_L1P_T0_AD0P_35 (io), F13 IO_L3P_T0_DQS_AD1P_35 (io), F14 IO_L3N_T0_DQS_AD1N_35 (io), F15 IO_L5N_T0_AD9N_35 (io), G15 IO_L5P_T0_AD9P_35 (io)
part D pins: A5 PS_MIO1_500 (io), A7 PS_MIO3_500 (io), A8 PS_MIO2_500 (io), A9 PS_MIO5_500 (io), A10 PS_MIO6_500 (io), A12 PS_MIO52_501 (io), A13 PS_MIO38_501 (io), A14 PS_MIO35_501 (io), A15 PS_MIO28_501 (io), B5 PS_MIO9_500 (io), B6 PS_MIO8_500 (io), B7 PS_MIO12_500 (io), B9 PS_MIO14_500 (io), B10 PS_MIO11_500 (io), B11 PS_SRST_B_501 (in), B12 PS_MIO48_501 (io), B14 PS_MIO36_501 (io), B15 PS_MIO30_501 (io), C6 PS_MIO13_500 (io), C7 PS_CLK_500 (in), C8 PS_MIO4_500 (io), C9 PS_POR_B_500 (in), C11 PS_MIO33_501 (io), C12 PS_MIO31_501 (io), C13 PS_MIO53_501 (io), C14 PS_MIO37_501 (io), D6 PS_MIO10_500 (io), D8 PS_MIO0_500 (io), D9 PS_MIO7_500 (io), D10 PS_MIO15_500 (io), D11 PS_MIO29_501 (io), D13 PS_MIO49_501 (io), D14 PS_MIO39_501 (io), D15 PS_MIO34_501 (io), E15 PS_MIO32_501 (io)
part E pins: A2 PS_DDR_DQ1_502 (io), A3 PS_DDR_DQ7_502 (io), A4 PS_DDR_DQ5_502 (io), B1 PS_DDR_DM0_502 (io), B2 PS_DDR_DQS_N0_502 (io), B4 PS_DDR_DQ4_502 (io), C1 PS_DDR_DQ3_502 (io), C2 PS_DDR_DQS_P0_502 (io), C3 PS_DDR_DQ6_502 (io), C4 PS_DDR_DQ2_502 (io), D1 PS_DDR_DQ9_502 (io), D3 PS_DDR_DM1_502 (io), D4 PS_DDR_DQ0_502 (io), E1 PS_DDR_DQ8_502 (io), E2 PS_DDR_DQ10_502 (io), E3 PS_DDR_DQ11_502 (io), F2 PS_DDR_DQS_N1_502 (io), F3 PS_DDR_DQ12_502 (io), G1 PS_DDR_DQ13_502 (io), G2 PS_DDR_DQS_P1_502 (io), H1 PS_DDR_DQ14_502 (io), H2 PS_DDR_DQ15_502 (io), H3 PS_DDR_VRP_502 (io), J1 PS_DDR_A10_502 (io), J3 PS_DDR_VRN_502 (io), K1 PS_DDR_A14_502 (io), K2 PS_DDR_A13_502 (io), K3 PS_DDR_ODT_502 (io), L2 PS_DDR_A11_502 (io), L3 PS_DDR_CKE_502 (io), L4 PS_DDR_DRST_B_502 (io), M1 PS_DDR_A2_502 (io), M2 PS_DDR_A12_502 (io), M4 PS_DDR_A3_502 (io), M5 PS_DDR_A7_502 (io), M6 PS_DDR_BA0_502 (io), N1 PS_DDR_A1_502 (io), N2 PS_DDR_CKN_502 (io), N3 PS_DDR_CKP_502 (io), N4 PS_DDR_A9_502 (io), N6 PS_DDR_BA2_502 (io), P1 PS_DDR_A0_502 (io), P3 PS_DDR_A4_502 (io), P4 PS_DDR_A5_502 (io), P5 PS_DDR_A6_502 (io), P6 PS_DDR_A8_502 (io), R1 PS_DDR_BA1_502 (io), R2 PS_DDR_CS_B_502 (io), R3 PS_DDR_WE_B_502 (io), R5 PS_DDR_CAS_B_502 (io), R6 PS_DDR_RAS_B_502 (io)
part F pins: A1 GND (power), A6 VCCO_MIO0_500 (power), A11 GND (power), B3 VCCO_DDR_502 (power), B8 GND (power), B13 VCCO_MIO1_501 (power), C5 GND (power), C10 VCCO_MIO1_501 (power), C15 GND (power), D2 GND (power), D7 VCCO_MIO0_500 (power), D12 GND (power), E4 VCCO_DDR_502 (power), E5 GND (power), E6 VCCBATT_0 (power), E7 GND (power), E8 RSVDGND (power), E9 GND (power), E10 VCCINT (power), E14 VCCO_MIO1_501 (power), F1 VCCO_DDR_502 (power), F4 PS_DDR_VREF0_502 (power), F5 VCCPLL (power), F7 VCCADC_0 (power), F8 GNDADC_0 (power), F9 VCCINT (power), F10 GND (power), F11 VCCO_35 (power), G3 GND (power), G4 RSVDVCC1 (power), G5 GND (power), G6 VCCPINT (power), G8 VREFN_0 (power), G10 VCCINT (power), G13 GND (power), H4 RSVDVCC3 (power), H5 VCCPINT (power), H6 GND (power), H7 VREFP_0 (power), H9 VCCAUX (power), H10 GND (power), H15 VCCO_35 (power), J2 VCCO_DDR_502 (power), J4 RSVDVCC2 (power), J5 GND (power), J6 VCCPAUX (power), J8 VCCAUX (power), J9 GND (power), J10 VCCINT (power), J12 VCCO_34 (power), K4 GND (power), K5 VCCPINT (power), K7 GND (power), K8 VCCO_0 (power), K9 VCCAUX (power), K10 GND (power), K14 GND (power), L1 GND (power), L5 GND (power), L6 VCCPAUX (power), L10 VCCINT (power), L11 GND (power), M3 VCCO_DDR_502 (power), M8 GND (power), M13 VCCO_34 (power), N5 GND (power), N10 VCCO_34 (power), N15 GND (power), P2 GND (power), P7 VCCO_34 (power), P12 GND (power), R4 VCCO_DDR_502 (power), R9 GND (power), R14 VCCO_34 (power)

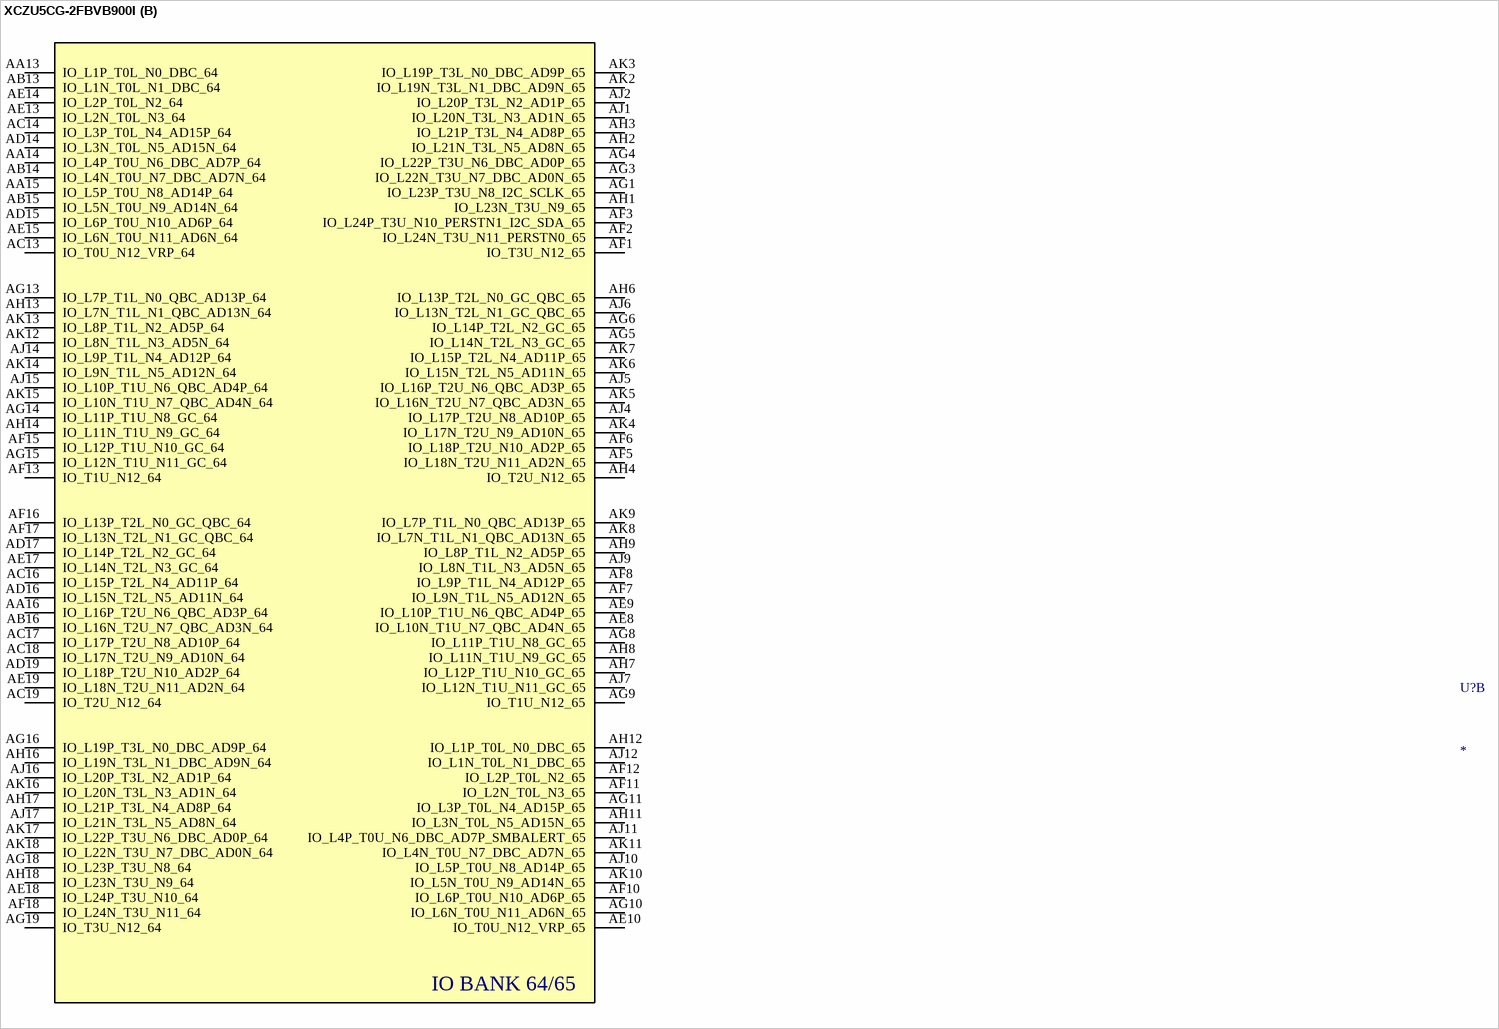
[diagram p5: symbol XCZU5CG-2FBVB900I]

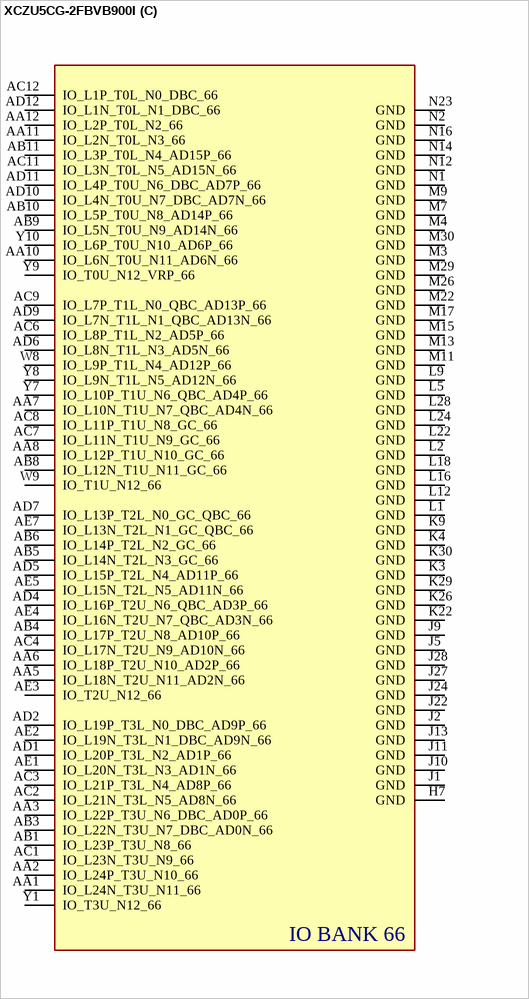
[diagram p6: symbol XCZU5CG-2FBVB900I]

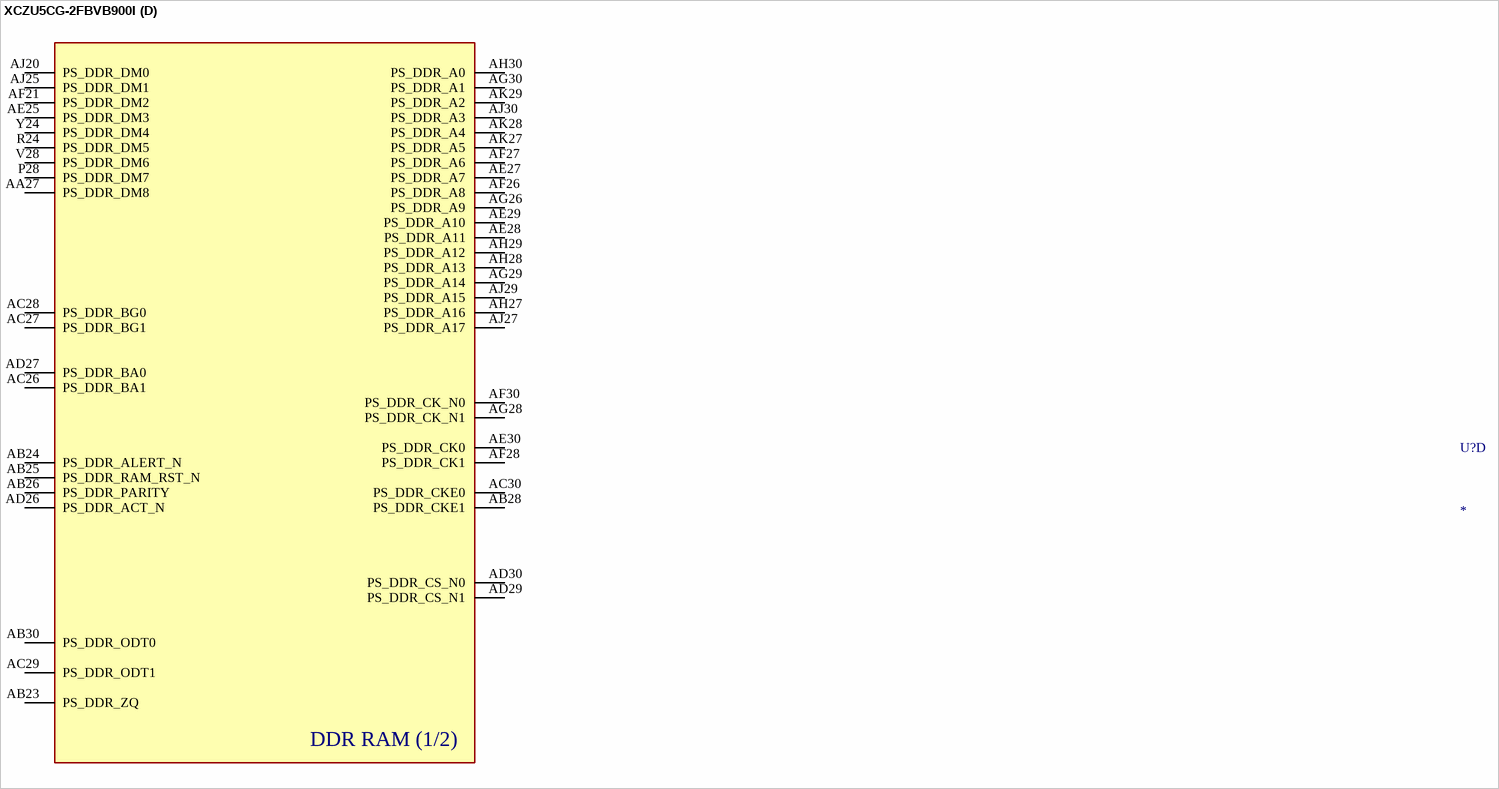
[diagram p7: symbol XCZU5CG-2FBVB900I]

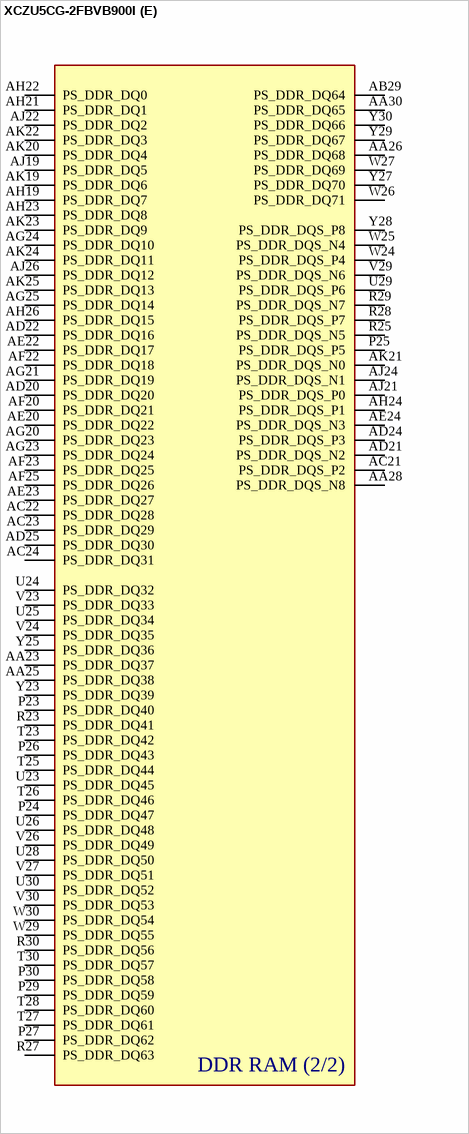
[diagram p8: symbol XCZU5CG-2FBVB900I]

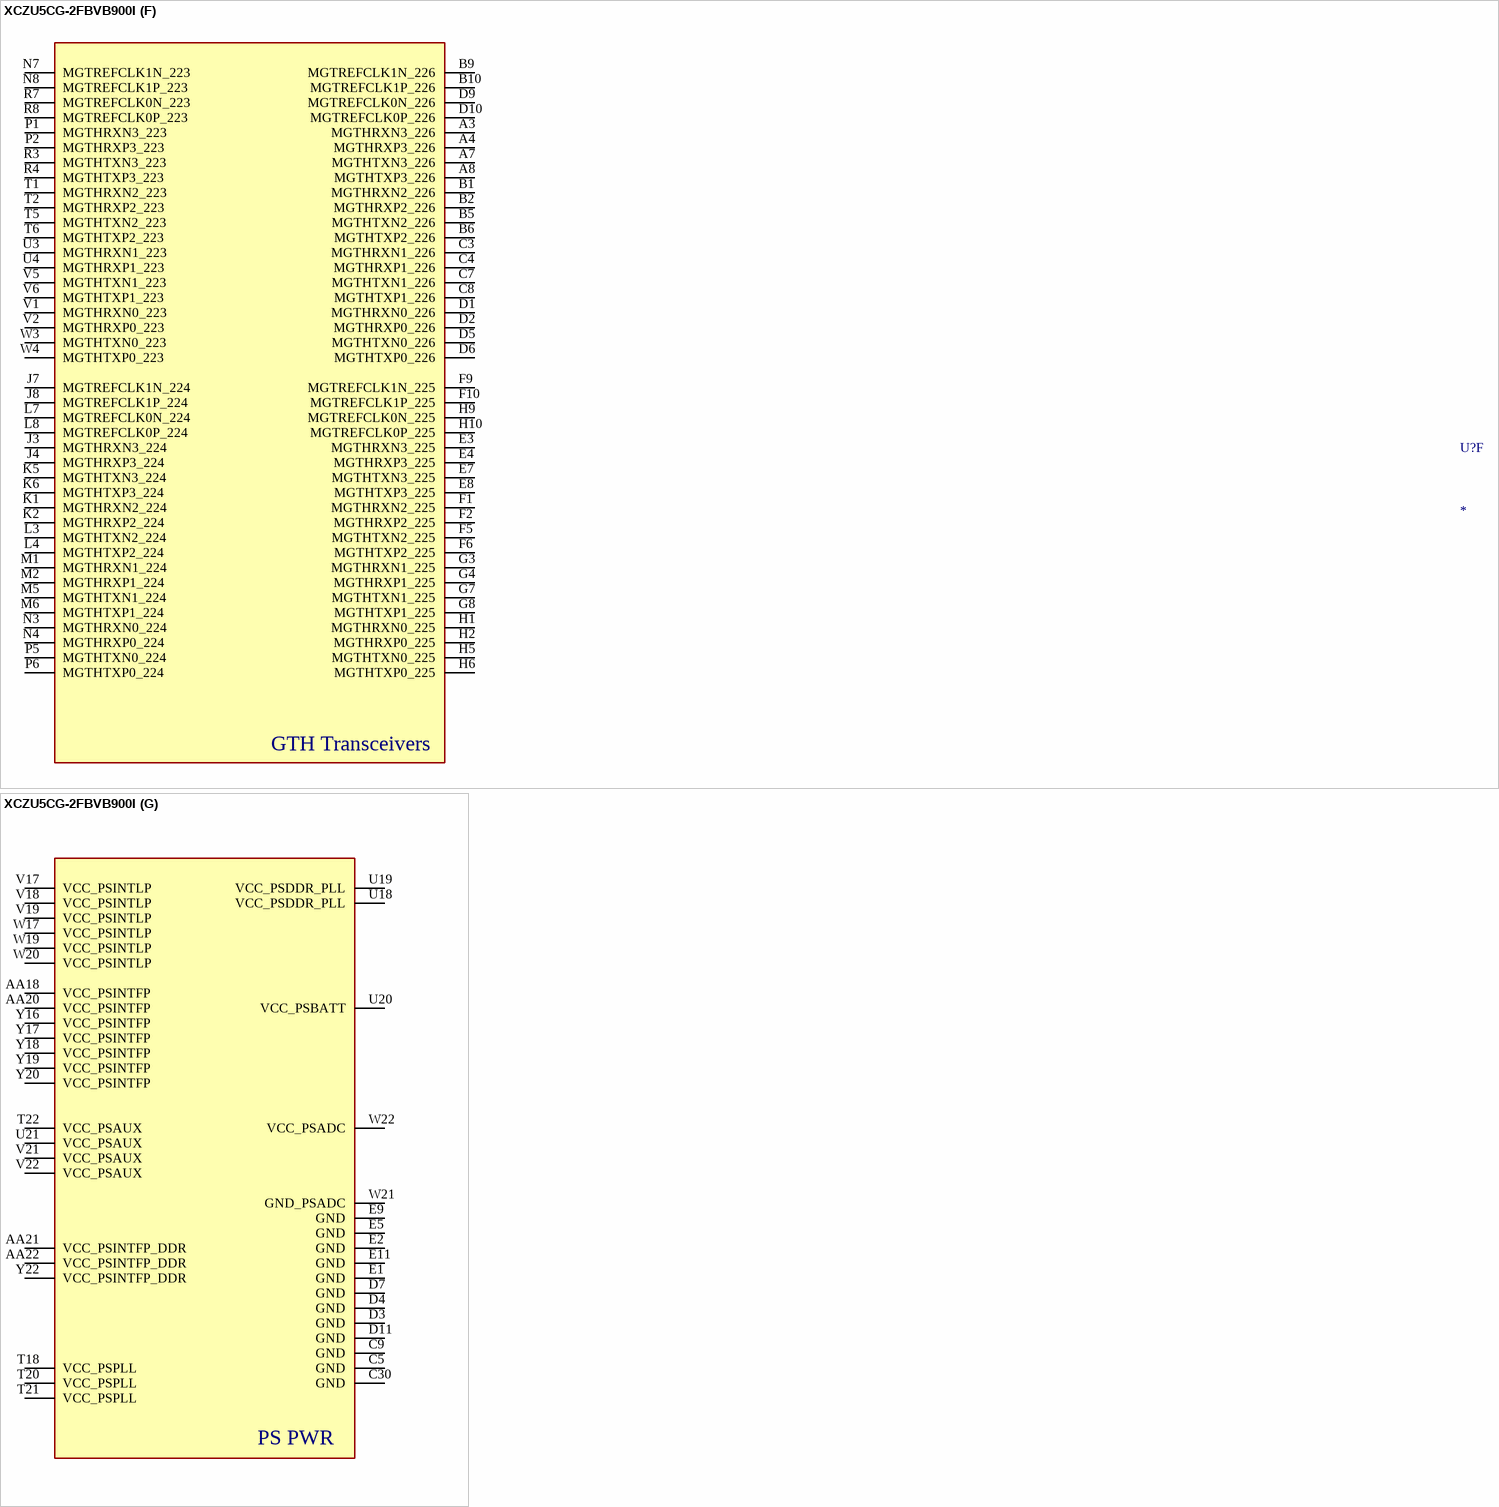
[diagram p9: symbol XCZU5CG-2FBVB900I]

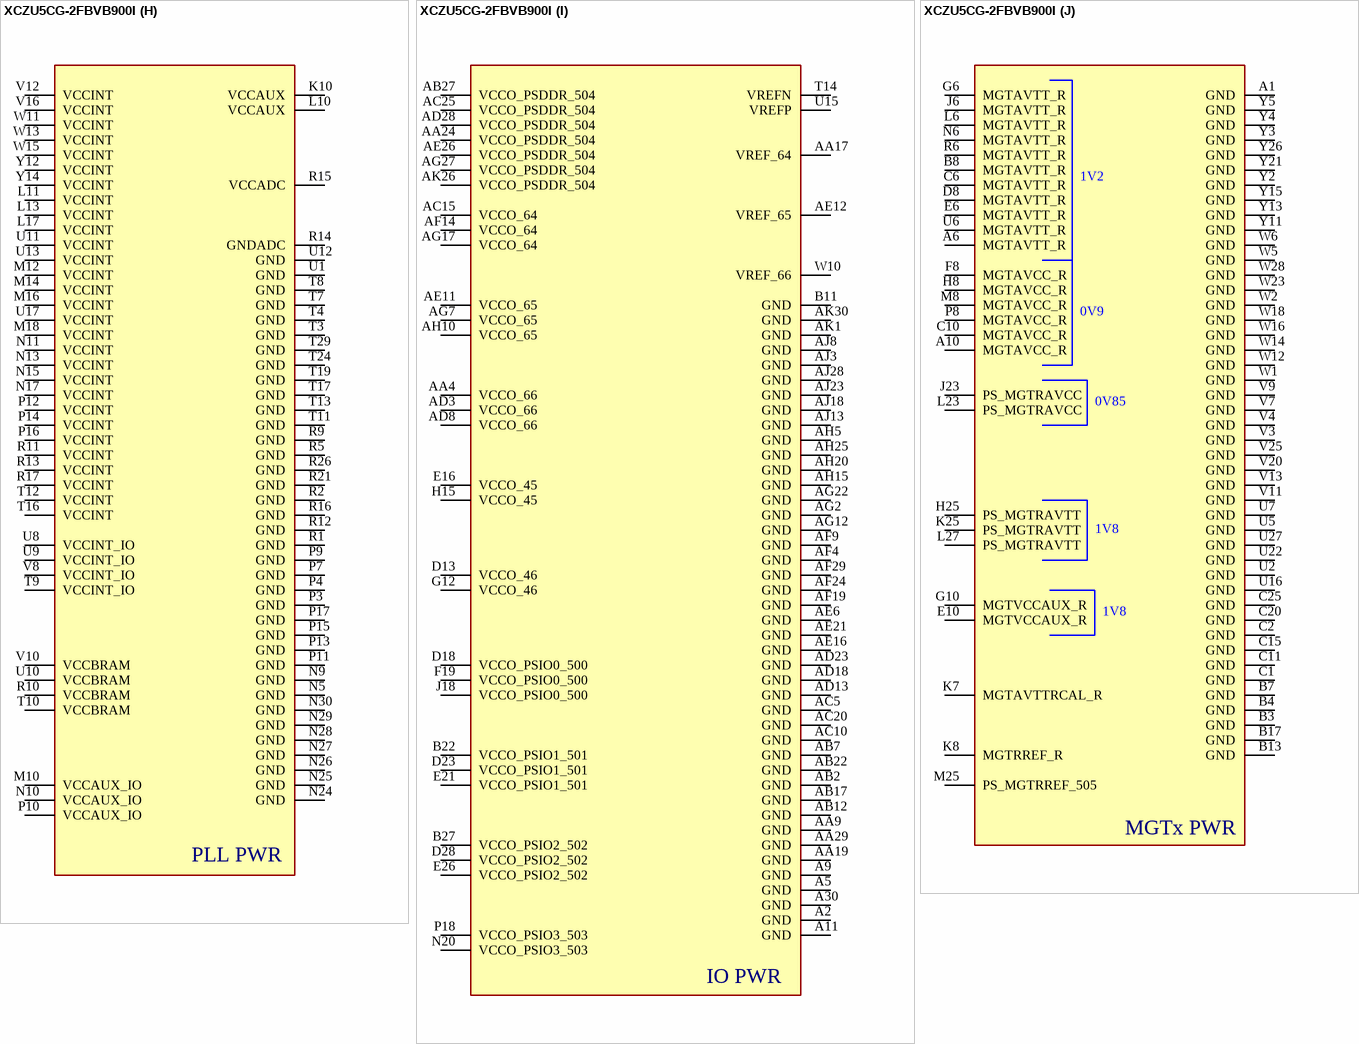
[diagram p10: symbol XCZU5CG-2FBVB900I]

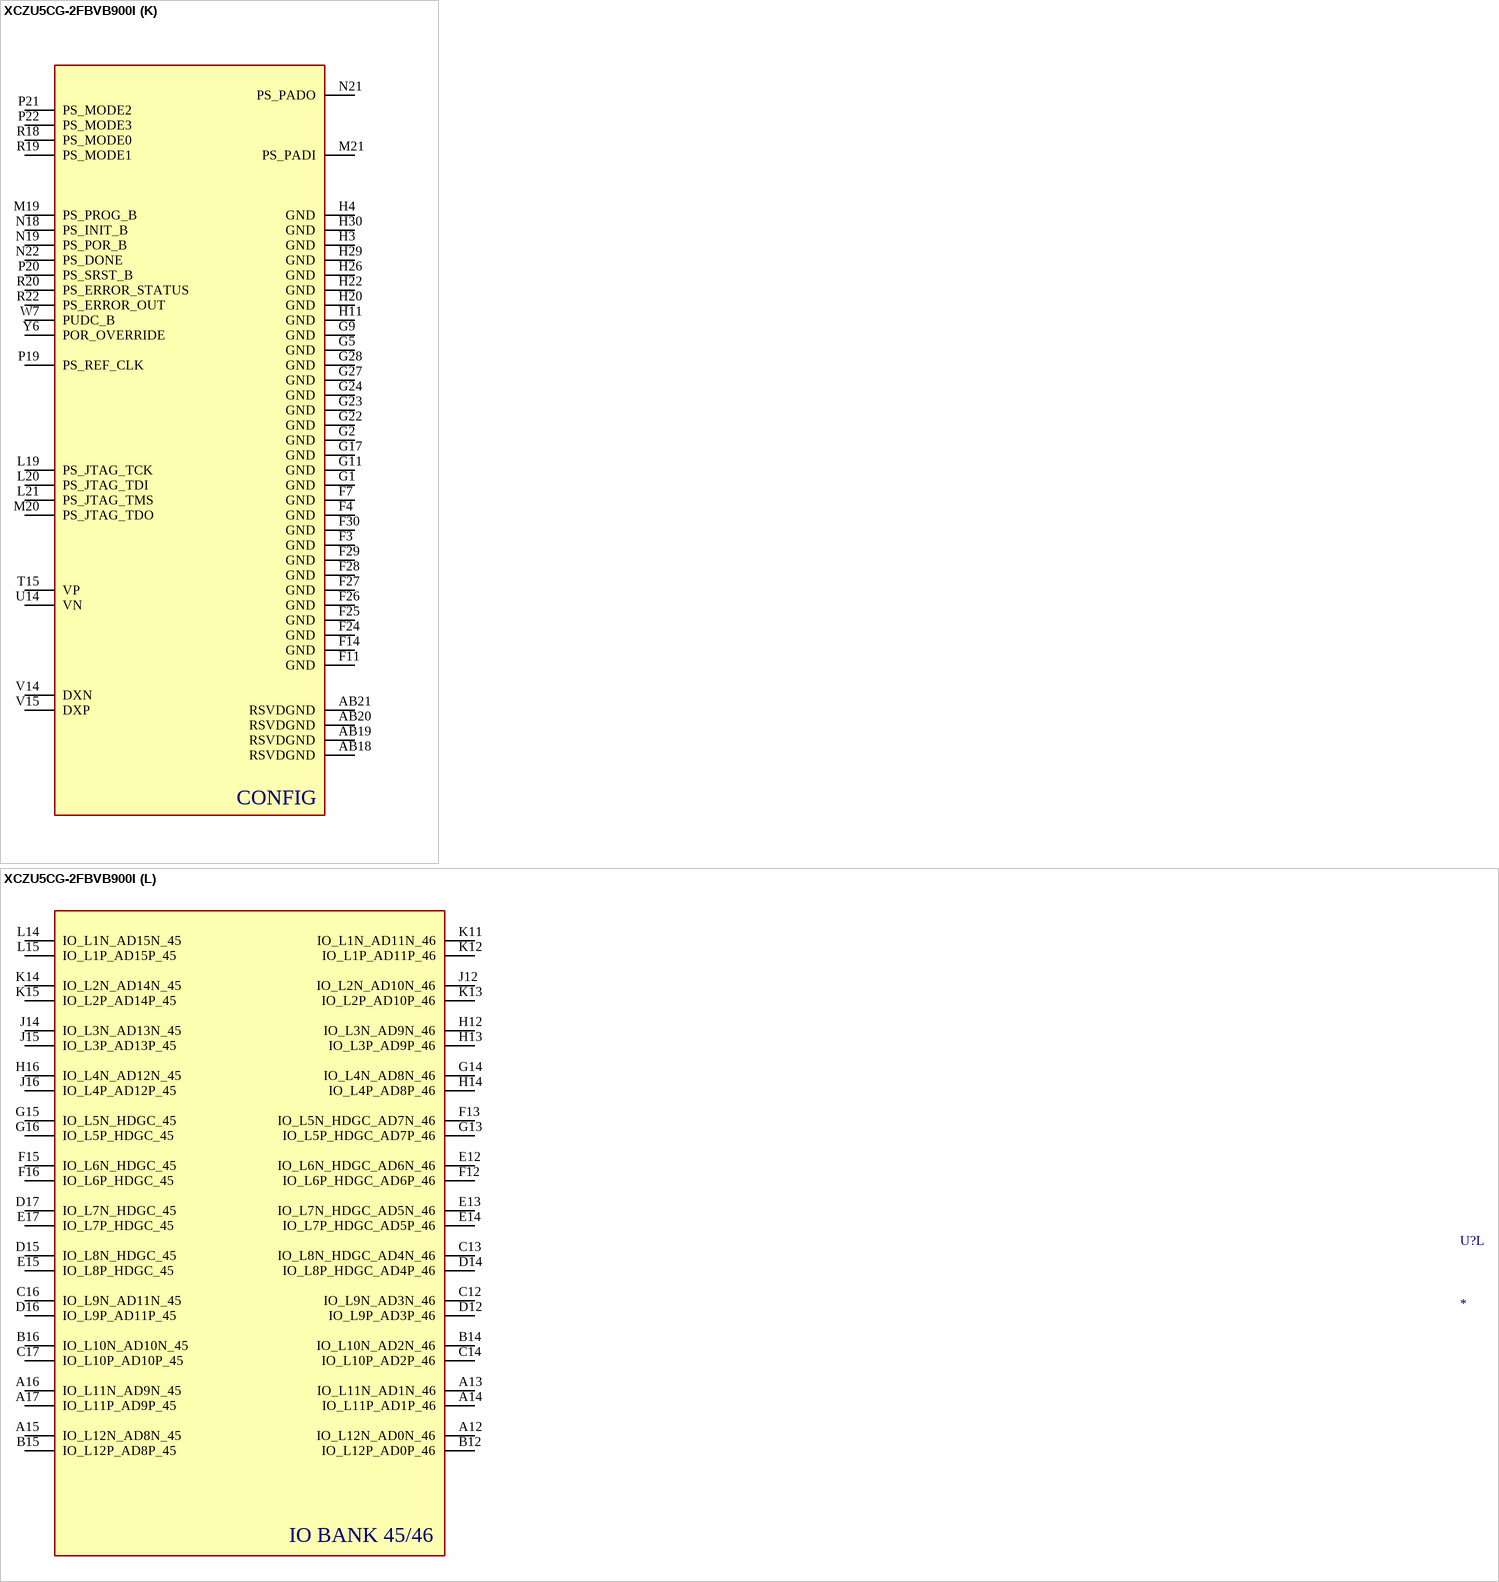
[diagram p11: symbol XCZU5CG-2FBVB900I]

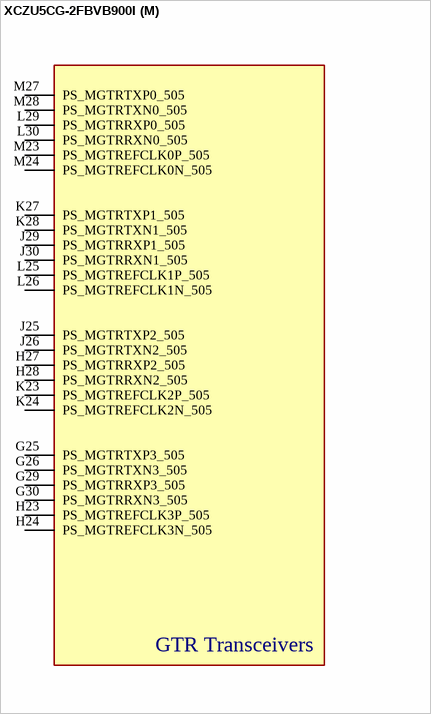
[diagram p12: symbol XCZU5CG-2FBVB900I]

## XCZU5CG-2FBVB900I
designator U?
Dual ARM® Cortex®-A53 MPCore™ with CoreSight™, Dual ARM®Cortex™-R5 with CoreSight™ System On Chip (SOC) IC Zynq® UltraScale+™ MPSOC CG Zynq®UltraScale+™ FPGA, 256K+ Logic Cells 533MHz, 1.3GHz 900-FCBGA (31x31); Manufacturer Part Number: XCZU5CG-2FBVB900I; Manufacturer: AMD; Est Price INR: 3,94,206.81; Max Current: 1 to 6A; Population Status: YES; Supply Voltage: 0.7 to 3.3V; Datasheet Link: https://docs.amd.com/v/u/en-US/ds891-zynq-ultrascale-plus-overview; Height: 1.2mm; Package: 900-FCBGA; Supplier Part Number: XCZU5CG-2FBVB900I-ND; Supplier: Digikey; Temperature Range: -40 to 100; Weight: 5.10g
footprint BGA900C100P30X30_3100X3100X288
part A pins: A18 PS_MIO24 "PSMIO", A19 PS_MIO20 "PSMIO", A20 PS_MIO1 "PSMIO", A21 PS_MIO28 "PSMIO", A22 PS_MIO31 "PSMIO", A23 PS_MIO54 "PSMIO", A24 PS_MIO52 "PSMIO", A25 PS_MIO56 "PSMIO", A26 PS_MIO57 "PSMIO", A27 PS_MIO59 "PSMIO", A28 PS_MIO58 "PSMIO", A29 PS_MIO63 "PSMIO", B18 PS_MIO25 "PSMIO", B19 PS_MIO2 "PSMIO", B20 PS_MIO26 "PSMIO", B21 PS_MIO27 "PSMIO", B23 PS_MIO35 "PSMIO", B24 PS_MIO34 "PSMIO", B25 PS_MIO53 "PSMIO", B26 PS_MIO55 "PSMIO", B28 PS_MIO62 "PSMIO", B29 PS_MIO61 "PSMIO", B30 PS_MIO64 "PSMIO", C18 PS_MIO17 "PSMIO", C19 PS_MIO5 "PSMIO", C21 PS_MIO30 "PSMIO", C22 PS_MIO33 "PSMIO", C23 PS_MIO38 "PSMIO", C24 PS_MIO40 "PSMIO", C26 PS_MIO60 "PSMIO", C27 PS_MIO66 "PSMIO", C28 PS_MIO67 "PSMIO", C29 PS_MIO68 "PSMIO", D19 PS_MIO3 "PSMIO", D20 PS_MIO6 "PSMIO", D21 PS_MIO29 "PSMIO", D22 PS_MIO36 "PSMIO", D24 PS_MIO41 "PSMIO", D25 PS_MIO65 "PSMIO", D26 PS_MIO70 "PSMIO", D27 PS_MIO69 "PSMIO", D29 PS_MIO75 "PSMIO", D30 PS_MIO71 "PSMIO", E18 PS_MIO14 "PSMIO", E19 PS_MIO7 "PSMIO", E20 PS_MIO8 "PSMIO", E22 PS_MIO39 "PSMIO", E23 PS_MIO42 "PSMIO", E24 PS_MIO44 "PSMIO", E25 PS_MIO77 "PSMIO", E27 PS_MIO72 "PSMIO", E28 PS_MIO76 "PSMIO", E29 PS_MIO74 "PSMIO", E30 PS_MIO73 "PSMIO", F17 PS_MIO22 "PSMIO", F18 PS_MIO10 "PSMIO", F20 PS_MIO9 "PSMIO", F21 PS_MIO37 "PSMIO", F22 PS_MIO43 "PSMIO", F23 PS_MIO45 "PSMIO", G18 PS_MIO11 "PSMIO", G19 PS_MIO13 "PSMIO", G20 PS_MIO32 "PSMIO", G21 PS_MIO49 "PSMIO", H17 PS_MIO0 "PSMIO", H18 PS_MIO12 "PSMIO", H19 PS_MIO21 "PSMIO", H21 PS_MIO51 "PSMIO", J17 PS_MIO4 "PSMIO", J19 PS_MIO15 "PSMIO", J20 PS_MIO50 "PSMIO", J21 PS_MIO48 "PSMIO", K16 PS_MIO19 "PSMIO", K17 PS_MIO16 "PSMIO", K18 PS_MIO18 "PSMIO", K19 PS_MIO23 "PSMIO", K20 PS_MIO46 "PSMIO", K21 PS_MIO47 "PSMIO"
part B pins: AA13 IO_L1P_T0L_N0_DBC_64 "HP", AA14 IO_L4P_T0U_N6_DBC_AD7P_64 "HP", AA15 IO_L5P_T0U_N8_AD14P_64 "HP", AA16 IO_L16P_T2U_N6_QBC_AD3P_64 "HP", AB13 IO_L1N_T0L_N1_DBC_64 "HP", AB14 IO_L4N_T0U_N7_DBC_AD7N_64 "HP", AB15 IO_L5N_T0U_N9_AD14N_64 "HP", AB16 IO_L16N_T2U_N7_QBC_AD3N_64 "HP", AC13 IO_T0U_N12_VRP_64 "HP", AC14 IO_L3P_T0L_N4_AD15P_64 "HP", AC16 IO_L15P_T2L_N4_AD11P_64 "HP", AC17 IO_L17P_T2U_N8_AD10P_64 "HP", AC18 IO_L17N_T2U_N9_AD10N_64 "HP", AC19 IO_T2U_N12_64 "HP", AD14 IO_L3N_T0L_N5_AD15N_64 "HP", AD15 IO_L6P_T0U_N10_AD6P_64 "HP", AD16 IO_L15N_T2L_N5_AD11N_64 "HP", AD17 IO_L14P_T2L_N2_GC_64 "HP", AD19 IO_L18P_T2U_N10_AD2P_64 "HP", AE8 IO_L10N_T1U_N7_QBC_AD4N_65 "HP", AE9 IO_L10P_T1U_N6_QBC_AD4P_65 "HP", AE10 IO_T0U_N12_VRP_65 "HP", AE13 IO_L2N_T0L_N3_64 "HP", AE14 IO_L2P_T0L_N2_64 "HP", AE15 IO_L6N_T0U_N11_AD6N_64 "HP", AE17 IO_L14N_T2L_N3_GC_64 "HP", AE18 IO_L24P_T3U_N10_64 "HP", AE19 IO_L18N_T2U_N11_AD2N_64 "HP", AF1 IO_T3U_N12_65 "HP", AF2 IO_L24N_T3U_N11_PERSTN0_65 "HP", AF3 IO_L24P_T3U_N10_PERSTN1_I2C_SDA_65 "HP", AF5 IO_L18N_T2U_N11_AD2N_65 "HP", AF6 IO_L18P_T2U_N10_AD2P_65 "HP", AF7 IO_L9N_T1L_N5_AD12N_65 "HP", AF8 IO_L9P_T1L_N4_AD12P_65 "HP", AF10 IO_L6P_T0U_N10_AD6P_65 "HP", AF11 IO_L2N_T0L_N3_65 "HP", AF12 IO_L2P_T0L_N2_65 "HP", AF13 IO_T1U_N12_64 "HP", AF15 IO_L12P_T1U_N10_GC_64 "HP", AF16 IO_L13P_T2L_N0_GC_QBC_64 "HP", AF17 IO_L13N_T2L_N1_GC_QBC_64 "HP", AF18 IO_L24N_T3U_N11_64 "HP", AG1 IO_L23P_T3U_N8_I2C_SCLK_65 "HP", AG3 IO_L22N_T3U_N7_DBC_AD0N_65 "HP", AG4 IO_L22P_T3U_N6_DBC_AD0P_65 "HP", AG5 IO_L14N_T2L_N3_GC_65 "HP", AG6 IO_L14P_T2L_N2_GC_65 "HP", AG8 IO_L11P_T1U_N8_GC_65 "HP", AG9 IO_T1U_N12_65 "HP", AG10 IO_L6N_T0U_N11_AD6N_65 "HP", AG11 IO_L3P_T0L_N4_AD15P_65 "HP", AG13 IO_L7P_T1L_N0_QBC_AD13P_64 "HP", AG14 IO_L11P_T1U_N8_GC_64 "HP", AG15 IO_L12N_T1U_N11_GC_64 "HP", AG16 IO_L19P_T3L_N0_DBC_AD9P_64 "HP", AG18 IO_L23P_T3U_N8_64 "HP", AG19 IO_T3U_N12_64 "HP", AH1 IO_L23N_T3U_N9_65 "HP", AH2 IO_L21N_T3L_N5_AD8N_65 "HP", AH3 IO_L21P_T3L_N4_AD8P_65 "HP", AH4 IO_T2U_N12_65 "HP", AH6 IO_L13P_T2L_N0_GC_QBC_65 "HP", AH7 IO_L12P_T1U_N10_GC_65 "HP", AH8 IO_L11N_T1U_N9_GC_65 "HP", AH9 IO_L8P_T1L_N2_AD5P_65 "HP", AH11 IO_L3N_T0L_N5_AD15N_65 "HP", AH12 IO_L1P_T0L_N0_DBC_65 "HP", AH13 IO_L7N_T1L_N1_QBC_AD13N_64 "HP", AH14 IO_L11N_T1U_N9_GC_64 "HP", AH16 IO_L19N_T3L_N1_DBC_AD9N_64 "HP", AH17 IO_L21P_T3L_N4_AD8P_64 "HP", AH18 IO_L23N_T3U_N9_64 "HP", AJ1 IO_L20N_T3L_N3_AD1N_65 "HP", AJ2 IO_L20P_T3L_N2_AD1P_65 "HP", AJ4 IO_L17P_T2U_N8_AD10P_65 "HP", AJ5 IO_L16P_T2U_N6_QBC_AD3P_65 "HP", AJ6 IO_L13N_T2L_N1_GC_QBC_65 "HP", AJ7 IO_L12N_T1U_N11_GC_65 "HP", AJ9 IO_L8N_T1L_N3_AD5N_65 "HP", AJ10 IO_L5P_T0U_N8_AD14P_65 "HP", AJ11 IO_L4P_T0U_N6_DBC_AD7P_SMBALERT_65 "HP", AJ12 IO_L1N_T0L_N1_DBC_65 "HP", AJ14 IO_L9P_T1L_N4_AD12P_64 "HP", AJ15 IO_L10P_T1U_N6_QBC_AD4P_64 "HP", AJ16 IO_L20P_T3L_N2_AD1P_64 "HP", AJ17 IO_L21N_T3L_N5_AD8N_64 "HP", AK2 IO_L19N_T3L_N1_DBC_AD9N_65 "HP", AK3 IO_L19P_T3L_N0_DBC_AD9P_65 "HP", AK4 IO_L17N_T2U_N9_AD10N_65 "HP", AK5 IO_L16N_T2U_N7_QBC_AD3N_65 "HP", AK6 IO_L15N_T2L_N5_AD11N_65 "HP", AK7 IO_L15P_T2L_N4_AD11P_65 "HP", AK8 IO_L7N_T1L_N1_QBC_AD13N_65 "HP", AK9 IO_L7P_T1L_N0_QBC_AD13P_65 "HP", AK10 IO_L5N_T0U_N9_AD14N_65 "HP", AK11 IO_L4N_T0U_N7_DBC_AD7N_65 "HP", AK12 IO_L8N_T1L_N3_AD5N_64 "HP", AK13 IO_L8P_T1L_N2_AD5P_64 "HP", AK14 IO_L9N_T1L_N5_AD12N_64 "HP", AK15 IO_L10N_T1U_N7_QBC_AD4N_64 "HP", AK16 IO_L20N_T3L_N3_AD1N_64 "HP", AK17 IO_L22P_T3U_N6_DBC_AD0P_64 "HP", AK18 IO_L22N_T3U_N7_DBC_AD0N_64 "HP"
part C pins: AA1 IO_L24N_T3U_N11_66 "HP", AA2 IO_L24P_T3U_N10_66 "HP", AA3 IO_L22P_T3U_N6_DBC_AD0P_66 "HP", AA5 IO_L18N_T2U_N11_AD2N_66 "HP", AA6 IO_L18P_T2U_N10_AD2P_66 "HP", AA7 IO_L10N_T1U_N7_QBC_AD4N_66 "HP", AA8 IO_L12P_T1U_N10_GC_66 "HP", AA10 IO_L6N_T0U_N11_AD6N_66 "HP", AA11 IO_L2N_T0L_N3_66 "HP", AA12 IO_L2P_T0L_N2_66 "HP", AB1 IO_L23P_T3U_N8_66 "HP", AB3 IO_L22N_T3U_N7_DBC_AD0N_66 "HP", AB4 IO_L17P_T2U_N8_AD10P_66 "HP", AB5 IO_L14N_T2L_N3_GC_66 "HP", AB6 IO_L14P_T2L_N2_GC_66 "HP", AB8 IO_L12N_T1U_N11_GC_66 "HP", AB9 IO_L5N_T0U_N9_AD14N_66 "HP", AB10 IO_L5P_T0U_N8_AD14P_66 "HP", AB11 IO_L3P_T0L_N4_AD15P_66 "HP", AC1 IO_L23N_T3U_N9_66 "HP", AC2 IO_L21N_T3L_N5_AD8N_66 "HP", AC3 IO_L21P_T3L_N4_AD8P_66 "HP", AC4 IO_L17N_T2U_N9_AD10N_66 "HP", AC6 IO_L8P_T1L_N2_AD5P_66 "HP", AC7 IO_L11N_T1U_N9_GC_66 "HP", AC8 IO_L11P_T1U_N8_GC_66 "HP", AC9 IO_L7P_T1L_N0_QBC_AD13P_66 "HP", AC11 IO_L3N_T0L_N5_AD15N_66 "HP", AC12 IO_L1P_T0L_N0_DBC_66 "HP", AD1 IO_L20P_T3L_N2_AD1P_66 "HP", AD2 IO_L19P_T3L_N0_DBC_AD9P_66 "HP", AD4 IO_L16P_T2U_N6_QBC_AD3P_66 "HP", AD5 IO_L15P_T2L_N4_AD11P_66 "HP", AD6 IO_L8N_T1L_N3_AD5N_66 "HP", AD7 IO_L13P_T2L_N0_GC_QBC_66 "HP", AD9 IO_L7N_T1L_N1_QBC_AD13N_66 "HP", AD10 IO_L4N_T0U_N7_DBC_AD7N_66 "HP", AD11 IO_L4P_T0U_N6_DBC_AD7P_66 "HP", AD12 IO_L1N_T0L_N1_DBC_66 "HP", AE1 IO_L20N_T3L_N3_AD1N_66 "HP", AE2 IO_L19N_T3L_N1_DBC_AD9N_66 "HP", AE3 IO_T2U_N12_66 "HP", AE4 IO_L16N_T2U_N7_QBC_AD3N_66 "HP", AE5 IO_L15N_T2L_N5_AD11N_66 "HP", AE7 IO_L13N_T2L_N1_GC_QBC_66 "HP", H7 GND "NA", J1 GND "NA", J2 GND "NA", J5 GND "NA", J9 GND "NA", J10 GND "NA", J11 GND "NA", J13 GND "NA", J22 GND "NA", J24 GND "NA", J27 GND "NA", J28 GND "NA", K3 GND "NA", K4 GND "NA", K9 GND "NA", K22 GND "NA", K26 GND "NA", K29 GND "NA", K30 GND "NA", L1 GND "NA", L2 GND "NA", L5 GND "NA", L9 GND "NA", L12 GND "NA", L16 GND "NA", L18 GND "NA", L22 GND "NA", L24 GND "NA", L28 GND "NA", M3 GND "NA", M4 GND "NA", M7 GND "NA", M9 GND "NA", M11 GND "NA", M13 GND "NA", M15 GND "NA", M17 GND "NA", M22 GND "NA", M26 GND "NA", M29 GND "NA", M30 GND "NA", N1 GND "NA", N2 GND "NA", N12 GND "NA", N14 GND "NA", N16 GND "NA", N23 GND "NA", W8 IO_L9P_T1L_N4_AD12P_66 "HP", W9 IO_T1U_N12_66 "HP", Y1 IO_T3U_N12_66 "HP", Y7 IO_L10P_T1U_N6_QBC_AD4P_66 "HP", Y8 IO_L9N_T1L_N5_AD12N_66 "HP", Y9 IO_T0U_N12_VRP_66 "HP", Y10 IO_L6P_T0U_N10_AD6P_66 "HP"
part D pins: AA27 PS_DDR_DM8 "PSDDR", AB23 PS_DDR_ZQ "PSDDR", AB24 PS_DDR_ALERT_N "PSDDR", AB25 PS_DDR_RAM_RST_N "PSDDR", AB26 PS_DDR_PARITY "PSDDR", AB28 PS_DDR_CKE1 "PSDDR", AB30 PS_DDR_ODT0 "PSDDR", AC26 PS_DDR_BA1 "PSDDR", AC27 PS_DDR_BG1 "PSDDR", AC28 PS_DDR_BG0 "PSDDR", AC29 PS_DDR_ODT1 "PSDDR", AC30 PS_DDR_CKE0 "PSDDR", AD26 PS_DDR_ACT_N "PSDDR", AD27 PS_DDR_BA0 "PSDDR", AD29 PS_DDR_CS_N1 "PSDDR", AD30 PS_DDR_CS_N0 "PSDDR", AE25 PS_DDR_DM3 "PSDDR", AE27 PS_DDR_A7 "PSDDR", AE28 PS_DDR_A11 "PSDDR", AE29 PS_DDR_A10 "PSDDR", AE30 PS_DDR_CK0 "PSDDR", AF21 PS_DDR_DM2 "PSDDR", AF26 PS_DDR_A8 "PSDDR", AF27 PS_DDR_A6 "PSDDR", AF28 PS_DDR_CK1 "PSDDR", AF30 PS_DDR_CK_N0 "PSDDR", AG26 PS_DDR_A9 "PSDDR", AG28 PS_DDR_CK_N1 "PSDDR", AG29 PS_DDR_A14 "PSDDR", AG30 PS_DDR_A1 "PSDDR", AH27 PS_DDR_A16 "PSDDR", AH28 PS_DDR_A13 "PSDDR", AH29 PS_DDR_A12 "PSDDR", AH30 PS_DDR_A0 "PSDDR", AJ20 PS_DDR_DM0 "PSDDR", AJ25 PS_DDR_DM1 "PSDDR", AJ27 PS_DDR_A17 "PSDDR", AJ29 PS_DDR_A15 "PSDDR", AJ30 PS_DDR_A3 "PSDDR", AK27 PS_DDR_A5 "PSDDR", AK28 PS_DDR_A4 "PSDDR", AK29 PS_DDR_A2 "PSDDR", P28 PS_DDR_DM7 "PSDDR", R24 PS_DDR_DM5 "PSDDR", V28 PS_DDR_DM6 "PSDDR", Y24 PS_DDR_DM4 "PSDDR"
part E pins: AA23 PS_DDR_DQ37 "PSDDR", AA25 PS_DDR_DQ38 "PSDDR", AA26 PS_DDR_DQ68 "PSDDR", AA28 PS_DDR_DQS_N8 "PSDDR", AA30 PS_DDR_DQ65 "PSDDR", AB29 PS_DDR_DQ64 "PSDDR", AC21 PS_DDR_DQS_P2 "PSDDR", AC22 PS_DDR_DQ28 "PSDDR", AC23 PS_DDR_DQ29 "PSDDR", AC24 PS_DDR_DQ31 "PSDDR", AD20 PS_DDR_DQ20 "PSDDR", AD21 PS_DDR_DQS_N2 "PSDDR", AD22 PS_DDR_DQ16 "PSDDR", AD24 PS_DDR_DQS_P3 "PSDDR", AD25 PS_DDR_DQ30 "PSDDR", AE20 PS_DDR_DQ22 "PSDDR", AE22 PS_DDR_DQ17 "PSDDR", AE23 PS_DDR_DQ27 "PSDDR", AE24 PS_DDR_DQS_N3 "PSDDR", AF20 PS_DDR_DQ21 "PSDDR", AF22 PS_DDR_DQ18 "PSDDR", AF23 PS_DDR_DQ25 "PSDDR", AF25 PS_DDR_DQ26 "PSDDR", AG20 PS_DDR_DQ23 "PSDDR", AG21 PS_DDR_DQ19 "PSDDR", AG23 PS_DDR_DQ24 "PSDDR", AG24 PS_DDR_DQ10 "PSDDR", AG25 PS_DDR_DQ14 "PSDDR", AH19 PS_DDR_DQ7 "PSDDR", AH21 PS_DDR_DQ1 "PSDDR", AH22 PS_DDR_DQ0 "PSDDR", AH23 PS_DDR_DQ8 "PSDDR", AH24 PS_DDR_DQS_P1 "PSDDR", AH26 PS_DDR_DQ15 "PSDDR", AJ19 PS_DDR_DQ5 "PSDDR", AJ21 PS_DDR_DQS_P0 "PSDDR", AJ22 PS_DDR_DQ2 "PSDDR", AJ24 PS_DDR_DQS_N1 "PSDDR", AJ26 PS_DDR_DQ12 "PSDDR", AK19 PS_DDR_DQ6 "PSDDR", AK20 PS_DDR_DQ4 "PSDDR", AK21 PS_DDR_DQS_N0 "PSDDR", AK22 PS_DDR_DQ3 "PSDDR", AK23 PS_DDR_DQ9 "PSDDR", AK24 PS_DDR_DQ11 "PSDDR", AK25 PS_DDR_DQ13 "PSDDR", P23 PS_DDR_DQ40 "PSDDR", P24 PS_DDR_DQ47 "PSDDR", P25 PS_DDR_DQS_P5 "PSDDR", P26 PS_DDR_DQ43 "PSDDR", P27 PS_DDR_DQ62 "PSDDR", P29 PS_DDR_DQ59 "PSDDR", P30 PS_DDR_DQ58 "PSDDR", R23 PS_DDR_DQ41 "PSDDR", R25 PS_DDR_DQS_N5 "PSDDR", R27 PS_DDR_DQ63 "PSDDR", R28 PS_DDR_DQS_P7 "PSDDR", R29 PS_DDR_DQS_N7 "PSDDR", R30 PS_DDR_DQ56 "PSDDR", T23 PS_DDR_DQ42 "PSDDR", T25 PS_DDR_DQ44 "PSDDR", T26 PS_DDR_DQ46 "PSDDR", T27 PS_DDR_DQ61 "PSDDR", T28 PS_DDR_DQ60 "PSDDR", T30 PS_DDR_DQ57 "PSDDR", U23 PS_DDR_DQ45 "PSDDR", U24 PS_DDR_DQ32 "PSDDR", U25 PS_DDR_DQ34 "PSDDR", U26 PS_DDR_DQ48 "PSDDR", U28 PS_DDR_DQ50 "PSDDR", U29 PS_DDR_DQS_P6 "PSDDR", U30 PS_DDR_DQ52 "PSDDR", V23 PS_DDR_DQ33 "PSDDR", V24 PS_DDR_DQ35 "PSDDR", V26 PS_DDR_DQ49 "PSDDR", V27 PS_DDR_DQ51 "PSDDR", V29 PS_DDR_DQS_N6 "PSDDR", V30 PS_DDR_DQ53 "PSDDR", W24 PS_DDR_DQS_P4 "PSDDR", W25 PS_DDR_DQS_N4 "PSDDR", W26 PS_DDR_DQ71 "PSDDR", W27 PS_DDR_DQ69 "PSDDR", W29 PS_DDR_DQ55 "PSDDR", W30 PS_DDR_DQ54 "PSDDR", Y23 PS_DDR_DQ39 "PSDDR", Y25 PS_DDR_DQ36 "PSDDR", Y27 PS_DDR_DQ70 "PSDDR", Y28 PS_DDR_DQS_P8 "PSDDR", Y29 PS_DDR_DQ67 "PSDDR", Y30 PS_DDR_DQ66 "PSDDR"
part F pins: A3 MGTHRXN3_226 "GTH", A4 MGTHRXP3_226 "GTH", A7 MGTHTXN3_226 "GTH", A8 MGTHTXP3_226 "GTH", B1 MGTHRXN2_226 "GTH", B2 MGTHRXP2_226 "GTH", B5 MGTHTXN2_226 "GTH", B6 MGTHTXP2_226 "GTH", B9 MGTREFCLK1N_226 "GTH", B10 MGTREFCLK1P_226 "GTH", C3 MGTHRXN1_226 "GTH", C4 MGTHRXP1_226 "GTH", C7 MGTHTXN1_226 "GTH", C8 MGTHTXP1_226 "GTH", D1 MGTHRXN0_226 "GTH", D2 MGTHRXP0_226 "GTH", D5 MGTHTXN0_226 "GTH", D6 MGTHTXP0_226 "GTH", D9 MGTREFCLK0N_226 "GTH", D10 MGTREFCLK0P_226 "GTH", E3 MGTHRXN3_225 "GTH", E4 MGTHRXP3_225 "GTH", E7 MGTHTXN3_225 "GTH", E8 MGTHTXP3_225 "GTH", F1 MGTHRXN2_225 "GTH", F2 MGTHRXP2_225 "GTH", F5 MGTHTXN2_225 "GTH", F6 MGTHTXP2_225 "GTH", F9 MGTREFCLK1N_225 "GTH", F10 MGTREFCLK1P_225 "GTH", G3 MGTHRXN1_225 "GTH", G4 MGTHRXP1_225 "GTH", G7 MGTHTXN1_225 "GTH", G8 MGTHTXP1_225 "GTH", H1 MGTHRXN0_225 "GTH", H2 MGTHRXP0_225 "GTH", H5 MGTHTXN0_225 "GTH", H6 MGTHTXP0_225 "GTH", H9 MGTREFCLK0N_225 "GTH", H10 MGTREFCLK0P_225 "GTH", J3 MGTHRXN3_224 "GTH", J4 MGTHRXP3_224 "GTH", J7 MGTREFCLK1N_224 "GTH", J8 MGTREFCLK1P_224 "GTH", K1 MGTHRXN2_224 "GTH", K2 MGTHRXP2_224 "GTH", K5 MGTHTXN3_224 "GTH", K6 MGTHTXP3_224 "GTH", L3 MGTHTXN2_224 "GTH", L4 MGTHTXP2_224 "GTH", L7 MGTREFCLK0N_224 "GTH", L8 MGTREFCLK0P_224 "GTH", M1 MGTHRXN1_224 "GTH", M2 MGTHRXP1_224 "GTH", M5 MGTHTXN1_224 "GTH", M6 MGTHTXP1_224 "GTH", N3 MGTHRXN0_224 "GTH", N4 MGTHRXP0_224 "GTH", N7 MGTREFCLK1N_223 "GTH", N8 MGTREFCLK1P_223 "GTH", P1 MGTHRXN3_223 "GTH", P2 MGTHRXP3_223 "GTH", P5 MGTHTXN0_224 "GTH", P6 MGTHTXP0_224 "GTH", R3 MGTHTXN3_223 "GTH", R4 MGTHTXP3_223 "GTH", R7 MGTREFCLK0N_223 "GTH", R8 MGTREFCLK0P_223 "GTH", T1 MGTHRXN2_223 "GTH", T2 MGTHRXP2_223 "GTH", T5 MGTHTXN2_223 "GTH", T6 MGTHTXP2_223 "GTH", U3 MGTHRXN1_223 "GTH", U4 MGTHRXP1_223 "GTH", V1 MGTHRXN0_223 "GTH", V2 MGTHRXP0_223 "GTH", V5 MGTHTXN1_223 "GTH", V6 MGTHTXP1_223 "GTH", W3 MGTHTXN0_223 "GTH", W4 MGTHTXP0_223 "GTH"
part G pins: AA18 VCC_PSINTFP "NA", AA20 VCC_PSINTFP "NA", AA21 VCC_PSINTFP_DDR "NA", AA22 VCC_PSINTFP_DDR "NA", C5 GND "NA", C9 GND "NA", C30 GND "NA", D3 GND "NA", D4 GND "NA", D7 GND "NA", D11 GND "NA", E1 GND "NA", E2 GND "NA", E5 GND "NA", E9 GND "NA", E11 GND "NA", T18 VCC_PSPLL "NA", T20 VCC_PSPLL "NA", T21 VCC_PSPLL "NA", T22 VCC_PSAUX "NA", U18 VCC_PSDDR_PLL "NA", U19 VCC_PSDDR_PLL "NA", U20 VCC_PSBATT "NA", U21 VCC_PSAUX "NA", V17 VCC_PSINTLP "NA", V18 VCC_PSINTLP "NA", V19 VCC_PSINTLP "NA", V21 VCC_PSAUX "NA", V22 VCC_PSAUX "NA", W17 VCC_PSINTLP "NA", W19 VCC_PSINTLP "NA", W20 VCC_PSINTLP "NA", W21 GND_PSADC "NA", W22 VCC_PSADC "NA", Y16 VCC_PSINTFP "NA", Y17 VCC_PSINTFP "NA", Y18 VCC_PSINTFP "NA", Y19 VCC_PSINTFP "NA", Y20 VCC_PSINTFP "NA", Y22 VCC_PSINTFP_DDR "NA"
part H pins: K10 VCCAUX "NA", L10 VCCAUX "NA", L11 VCCINT "NA", L13 VCCINT "NA", L17 VCCINT "NA", M10 VCCAUX_IO "NA", M12 VCCINT "NA", M14 VCCINT "NA", M16 VCCINT "NA", M18 VCCINT "NA", N5 GND "NA", N9 GND "NA", N10 VCCAUX_IO "NA", N11 VCCINT "NA", N13 VCCINT "NA", N15 VCCINT "NA", N17 VCCINT "NA", N24 GND "NA", N25 GND "NA", N26 GND "NA", N27 GND "NA", N28 GND "NA", N29 GND "NA", N30 GND "NA", P3 GND "NA", P4 GND "NA", P7 GND "NA", P9 GND "NA", P10 VCCAUX_IO "NA", P11 GND "NA", P12 VCCINT "NA", P13 GND "NA", P14 VCCINT "NA", P15 GND "NA", P16 VCCINT "NA", P17 GND "NA", R1 GND "NA", R2 GND "NA", R5 GND "NA", R9 GND "NA", R10 VCCBRAM "NA", R11 VCCINT "NA", R12 GND "NA", R13 VCCINT "NA", R14 GNDADC "NA", R15 VCCADC "NA", R16 GND "NA", R17 VCCINT "NA", R21 GND "NA", R26 GND "NA", T3 GND "NA", T4 GND "NA", T7 GND "NA", T8 GND "NA", T9 VCCINT_IO "NA", T10 VCCBRAM "NA", T11 GND "NA", T12 VCCINT "NA", T13 GND "NA", T16 VCCINT "NA", T17 GND "NA", T19 GND "NA", T24 GND "NA", T29 GND "NA", U1 GND "NA", U8 VCCINT_IO "NA", U9 VCCINT_IO "NA", U10 VCCBRAM "NA", U11 VCCINT "NA", U12 GND "NA", U13 VCCINT "NA", U17 VCCINT "NA", V8 VCCINT_IO "NA", V10 VCCBRAM "NA", V12 VCCINT "NA", V16 VCCINT "NA", W11 VCCINT "NA", W13 VCCINT "NA", W15 VCCINT "NA", Y12 VCCINT "NA", Y14 VCCINT "NA"
part I pins: A2 GND "NA", A5 GND "NA", A9 GND "NA", A11 GND "NA", A30 GND "NA", AA4 VCCO_66 "NA", AA9 GND "NA", AA17 VREF_64 "HP", AA19 GND "NA", AA24 VCCO_PSDDR_504 "NA", AA29 GND "NA", AB2 GND "NA", AB7 GND "NA", AB12 GND "NA", AB17 GND "NA", AB22 GND "NA", AB27 VCCO_PSDDR_504 "NA", AC5 GND "NA", AC10 GND "NA", AC15 VCCO_64 "NA", AC20 GND "NA", AC25 VCCO_PSDDR_504 "NA", AD3 VCCO_66 "NA", AD8 VCCO_66 "NA", AD13 GND "NA", AD18 GND "NA", AD23 GND "NA", AD28 VCCO_PSDDR_504 "NA", AE6 GND "NA", AE11 VCCO_65 "NA", AE12 VREF_65 "HP", AE16 GND "NA", AE21 GND "NA", AE26 VCCO_PSDDR_504 "NA", AF4 GND "NA", AF9 GND "NA", AF14 VCCO_64 "NA", AF19 GND "NA", AF24 GND "NA", AF29 GND "NA", AG2 GND "NA", AG7 VCCO_65 "NA", AG12 GND "NA", AG17 VCCO_64 "NA", AG22 GND "NA", AG27 VCCO_PSDDR_504 "NA", AH5 GND "NA", AH10 VCCO_65 "NA", AH15 GND "NA", AH20 GND "NA", AH25 GND "NA", AJ3 GND "NA", AJ8 GND "NA", AJ13 GND "NA", AJ18 GND "NA", AJ23 GND "NA", AJ28 GND "NA", AK1 GND "NA", AK26 VCCO_PSDDR_504 "NA", AK30 GND "NA", B11 GND "NA", B22 VCCO_PSIO1_501 "NA", B27 VCCO_PSIO2_502 "NA", D13 VCCO_46 "NA", D18 VCCO_PSIO0_500 "NA", D23 VCCO_PSIO1_501 "NA", D28 VCCO_PSIO2_502 "NA", E16 VCCO_45 "NA", E21 VCCO_PSIO1_501 "NA", E26 VCCO_PSIO2_502 "NA", F19 VCCO_PSIO0_500 "NA", G12 VCCO_46 "NA", H15 VCCO_45 "NA", J18 VCCO_PSIO0_500 "NA", N20 VCCO_PSIO3_503 "NA", P18 VCCO_PSIO3_503 "NA", T14 VREFN "NA", U15 VREFP "NA", W10 VREF_66 "HP"
part J pins: A1 GND "NA", A6 MGTAVTT_R "NA", A10 MGTAVCC_R "NA", B3 GND "NA", B4 GND "NA", B7 GND "NA", B8 MGTAVTT_R "NA", B13 GND "NA", B17 GND "NA", C1 GND "NA", C2 GND "NA", C6 MGTAVTT_R "NA", C10 MGTAVCC_R "NA", C11 GND "NA", C15 GND "NA", C20 GND "NA", C25 GND "NA", D8 MGTAVTT_R "NA", E6 MGTAVTT_R "NA", E10 MGTVCCAUX_R "NA", F8 MGTAVCC_R "NA", G6 MGTAVTT_R "NA", G10 MGTVCCAUX_R "NA", H8 MGTAVCC_R "NA", H25 PS_MGTRAVTT "NA", J6 MGTAVTT_R "NA", J23 PS_MGTRAVCC "NA", K7 MGTAVTTRCAL_R "NA", K8 MGTRREF_R "NA", K25 PS_MGTRAVTT "NA", L6 MGTAVTT_R "NA", L23 PS_MGTRAVCC "NA", L27 PS_MGTRAVTT "NA", M8 MGTAVCC_R "NA", M25 PS_MGTRREF_505 "NA", N6 MGTAVTT_R "NA", P8 MGTAVCC_R "NA", R6 MGTAVTT_R "NA", U2 GND "NA", U5 GND "NA", U6 MGTAVTT_R "NA", U7 GND "NA", U16 GND "NA", U22 GND "NA", U27 GND "NA", V3 GND "NA", V4 GND "NA", V7 GND "NA", V9 GND "NA", V11 GND "NA", V13 GND "NA", V20 GND "NA", V25 GND "NA", W1 GND "NA", W2 GND "NA", W5 GND "NA", W6 GND "NA", W12 GND "NA", W14 GND "NA", W16 GND "NA", W18 GND "NA", W23 GND "NA", W28 GND "NA", Y2 GND "NA", Y3 GND "NA", Y4 GND "NA", Y5 GND "NA", Y11 GND "NA", Y13 GND "NA", Y15 GND "NA", Y21 GND "NA", Y26 GND "NA"
part K pins: AB18 RSVDGND "NA", AB19 RSVDGND "NA", AB20 RSVDGND "NA", AB21 RSVDGND "NA", F3 GND "NA", F4 GND "NA", F7 GND "NA", F11 GND "NA", F14 GND "NA", F24 GND "NA", F25 GND "NA", F26 GND "NA", F27 GND "NA", F28 GND "NA", F29 GND "NA", F30 GND "NA", G1 GND "NA", G2 GND "NA", G5 GND "NA", G9 GND "NA", G11 GND "NA", G17 GND "NA", G22 GND "NA", G23 GND "NA", G24 GND "NA", G27 GND "NA", G28 GND "NA", H3 GND "NA", H4 GND "NA", H11 GND "NA", H20 GND "NA", H22 GND "NA", H26 GND "NA", H29 GND "NA", H30 GND "NA", L19 PS_JTAG_TCK "PSCONFIG", L20 PS_JTAG_TDI "PSCONFIG", L21 PS_JTAG_TMS "PSCONFIG", M19 PS_PROG_B "PSCONFIG", M20 PS_JTAG_TDO "PSCONFIG", M21 PS_PADI "PSCONFIG", N18 PS_INIT_B "PSCONFIG", N19 PS_POR_B "PSCONFIG", N21 PS_PADO "PSCONFIG", N22 PS_DONE "PSCONFIG", P19 PS_REF_CLK "PSCONFIG", P20 PS_SRST_B "PSCONFIG", P21 PS_MODE2 "PSCONFIG", P22 PS_MODE3 "PSCONFIG", R18 PS_MODE0 "PSCONFIG", R19 PS_MODE1 "PSCONFIG", R20 PS_ERROR_STATUS "PSCONFIG", R22 PS_ERROR_OUT "PSCONFIG", T15 VP "NA", U14 VN "NA", V14 DXN "NA", V15 DXP "NA", W7 PUDC_B "CONFIG", Y6 POR_OVERRIDE "NA"
part L pins: A12 IO_L12N_AD0N_46 "HD", A13 IO_L11N_AD1N_46 "HD", A14 IO_L11P_AD1P_46 "HD", A15 IO_L12N_AD8N_45 "HD", A16 IO_L11N_AD9N_45 "HD", A17 IO_L11P_AD9P_45 "HD", B12 IO_L12P_AD0P_46 "HD", B14 IO_L10N_AD2N_46 "HD", B15 IO_L12P_AD8P_45 "HD", B16 IO_L10N_AD10N_45 "HD", C12 IO_L9N_AD3N_46 "HD", C13 IO_L8N_HDGC_AD4N_46 "HD", C14 IO_L10P_AD2P_46 "HD", C16 IO_L9N_AD11N_45 "HD", C17 IO_L10P_AD10P_45 "HD", D12 IO_L9P_AD3P_46 "HD", D14 IO_L8P_HDGC_AD4P_46 "HD", D15 IO_L8N_HDGC_45 "HD", D16 IO_L9P_AD11P_45 "HD", D17 IO_L7N_HDGC_45 "HD", E12 IO_L6N_HDGC_AD6N_46 "HD", E13 IO_L7N_HDGC_AD5N_46 "HD", E14 IO_L7P_HDGC_AD5P_46 "HD", E15 IO_L8P_HDGC_45 "HD", E17 IO_L7P_HDGC_45 "HD", F12 IO_L6P_HDGC_AD6P_46 "HD", F13 IO_L5N_HDGC_AD7N_46 "HD", F15 IO_L6N_HDGC_45 "HD", F16 IO_L6P_HDGC_45 "HD", G13 IO_L5P_HDGC_AD7P_46 "HD", G14 IO_L4N_AD8N_46 "HD", G15 IO_L5N_HDGC_45 "HD", G16 IO_L5P_HDGC_45 "HD", H12 IO_L3N_AD9N_46 "HD", H13 IO_L3P_AD9P_46 "HD", H14 IO_L4P_AD8P_46 "HD", H16 IO_L4N_AD12N_45 "HD", J12 IO_L2N_AD10N_46 "HD", J14 IO_L3N_AD13N_45 "HD", J15 IO_L3P_AD13P_45 "HD", J16 IO_L4P_AD12P_45 "HD", K11 IO_L1N_AD11N_46 "HD", K12 IO_L1P_AD11P_46 "HD", K13 IO_L2P_AD10P_46 "HD", K14 IO_L2N_AD14N_45 "HD", K15 IO_L2P_AD14P_45 "HD", L14 IO_L1N_AD15N_45 "HD", L15 IO_L1P_AD15P_45 "HD"
part M pins: G25 PS_MGTRTXP3_505 "PSGTR", G26 PS_MGTRTXN3_505 "PSGTR", G29 PS_MGTRRXP3_505 "PSGTR", G30 PS_MGTRRXN3_505 "PSGTR", H23 PS_MGTREFCLK3P_505 "PSGTR", H24 PS_MGTREFCLK3N_505 "PSGTR", H27 PS_MGTRRXP2_505 "PSGTR", H28 PS_MGTRRXN2_505 "PSGTR", J25 PS_MGTRTXP2_505 "PSGTR", J26 PS_MGTRTXN2_505 "PSGTR", J29 PS_MGTRRXP1_505 "PSGTR", J30 PS_MGTRRXN1_505 "PSGTR", K23 PS_MGTREFCLK2P_505 "PSGTR", K24 PS_MGTREFCLK2N_505 "PSGTR", K27 PS_MGTRTXP1_505 "PSGTR", K28 PS_MGTRTXN1_505 "PSGTR", L25 PS_MGTREFCLK1P_505 "PSGTR", L26 PS_MGTREFCLK1N_505 "PSGTR", L29 PS_MGTRRXP0_505 "PSGTR", L30 PS_MGTRRXN0_505 "PSGTR", M23 PS_MGTREFCLK0P_505 "PSGTR", M24 PS_MGTREFCLK0N_505 "PSGTR", M27 PS_MGTRTXP0_505 "PSGTR", M28 PS_MGTRTXN0_505 "PSGTR"
part A text: PSMIO
part B text: IO BANK 64/65
part C text: IO BANK 66
part D text: DDR RAM (1/2)
part E text: DDR RAM (2/2)
part F text: GTH Transceivers
part G text: PS PWR
part H text: PLL PWR
part I text: IO PWR
part J text: 1V2; 0V9; 0V85; 1V8; MGTx PWR
part K text: CONFIG
part L text: IO BANK 45/46
part M text: GTR Transceivers